# Altium schematic symbol library Ic%.SchLib: 452 symbols (part 4 of 12)
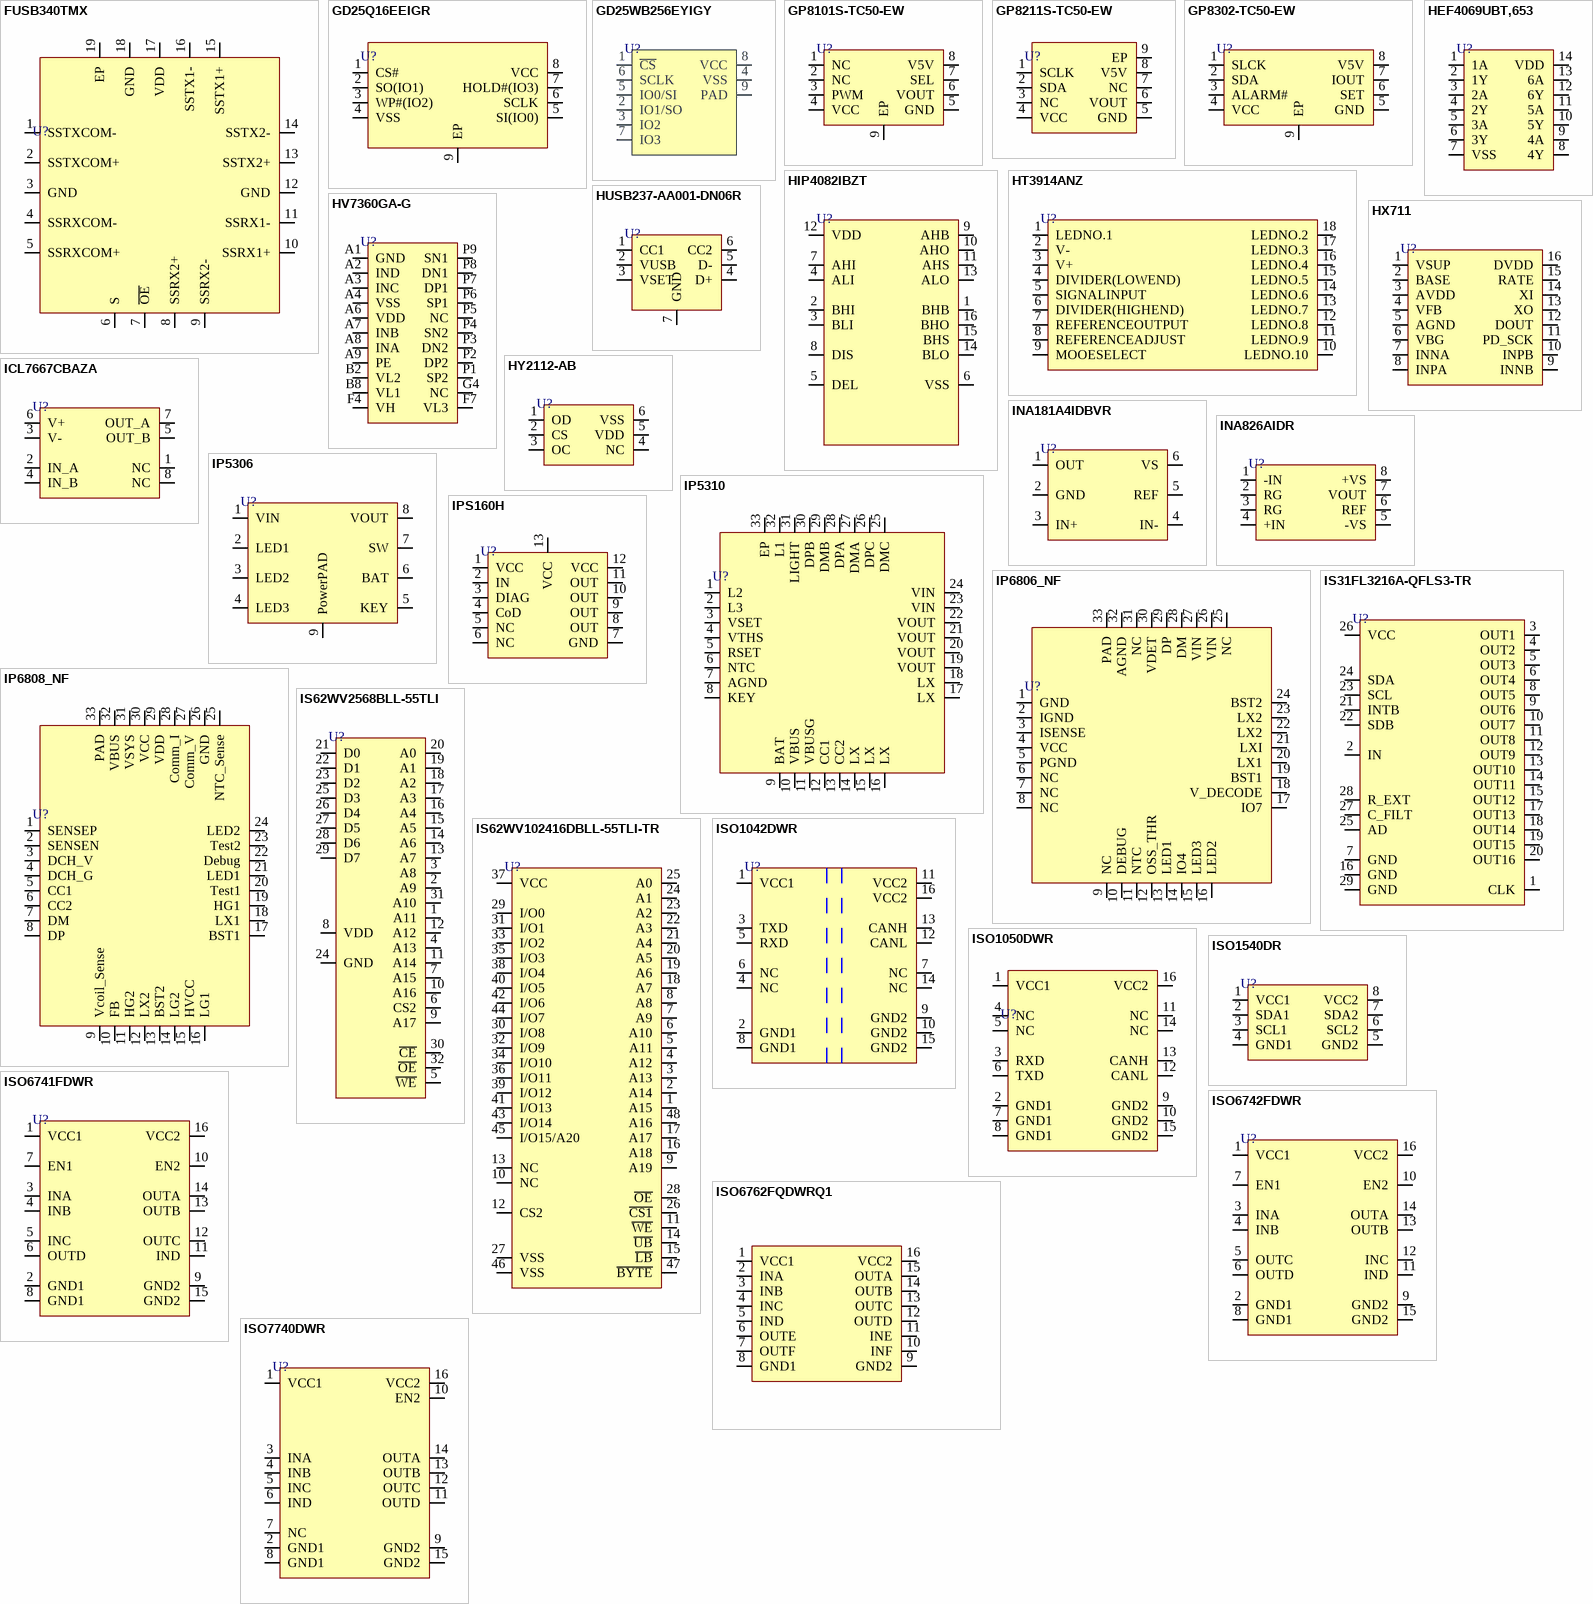
[diagram p26: symbols FUSB340TMX to ISO7740DWR]

## HUSB237-AA001-DN06R
designator U?
DFN-6L-EP(2x2) USB PD ROHS; Manufacturer: Hynetek; Manufacturer Part Number: HUSB237-AA001-DN06R; Item Type: IC; Package: DFN-6L-EP(2x2); LCSC Part Number: C22373734; ComponentLink1Description: LCSC; ComponentLink1URL: https://www.lcsc.com/product-detail/USB-PD_Hynetek-HUSB237-AA001-DN06R_C22373734.html
footprint DFN-6L-EP(2x2)
pins: 1 CC1, 2 VUSB, 3 VSET, 4 D+, 5 D-, 6 CC2, 7 GND

## HV7360GA-G
designator U?
Power Management Specialised - PMIC 1-Ch +/-100V 2.5A 2/3-Lev AC Coupled Pulser; Manufacturer: Microchip; Manufacturer Part Number: HV7360GA-G; Item Type: IC; Operating Supply Current: 50uA; Supplier: Farnell; LCSC Part Number: C633419; RoHS: Yes; Stock: 164; Mounting Technology: Surface Mount; Case/Package: TFBGA; Min Operating Temperature: -20°C; Max Operating Temperature: 85°C; Packaging: Tray; Series: -; RoHS Compliant: Yes; ComponentLink1URL: http://www.microchip.com/mymicrochip/filehandler.aspx?ddocname=en571410&src-supplier=Digikey; ComponentLink1Description: http://www.microchip.com/mymicrochip/filehandler.aspx?ddocname=en571410&src-supplier=Digikey
footprint CABGA-22
pins: A1 GND, A2 IND, A3 INC, A4 VSS, A6 VDD, A7 INB, A8 INA, A9 PE, B2 VL2, B8 VL1, F4 VH, F7 VL3, G4 NC, P1 SP2, P2 DP2, P3 DN2, P4 SN2, P5 NC, P6 SP1, P7 DP1, P8 DN1, P9 SN1

## HX711
designator U?
2.7V~5.5V 24Bit SOP-16 Analog to Digital Converters (ADC) ROHS; Manufacturer: Avia Semicon (Xiamen); Manufacturer Part Number: HX711; Item Type: IC; Package: SOP-16; LCSC Part Number: C6705483; ComponentLink1Description: LCSC; ComponentLink1URL: https://www.lcsc.com/product-detail/Analog-to-Digital-Converters-ADC_Avia-Semicon-Xiamen-HX711_C6705483.html
footprint SOP-16
pins: 1 VSUP, 2 BASE, 3 AVDD, 4 VFB, 5 AGND, 6 VBG, 7 INNA, 8 INPA, 9 INNB, 10 INPB, 11 PD_SCK, 12 DOUT, 13 XO, 14 XI, 15 RATE, 16 DVDD

## HY2112-AB
designator U?
SOT-23-6 Battery Management ROHS; Manufacturer: HYCON Tech; Manufacturer Part Number: HY2112-AB; Item Type: IC; Package: SOT-23-6; LCSC Part Number: C168763; ComponentLink1Description: LCSC; ComponentLink1URL: https://www.lcsc.com/product-detail/Battery-Management_HYCON-Tech-HY2112-AB_C168763.html?s_z=n_HY2112
footprint SOT-23-6
pins: 1 OD, 2 CS, 3 OC, 4 NC, 5 VDD, 6 VSS

## ICL7667CBAZA
designator U?
MOSFET 4.5V~15V SOIC-8 Gate Drive ICs ROHS; Manufacturer: RENESAS; Manufacturer Part Number: ICL7667CBAZA; Item Type: IC; Package: SOIC-8; LCSC Part Number: C1549286; ComponentLink1Description: LCSC; ComponentLink1URL: https://www.lcsc.com/product-detail/Gate-Drive-ICs_RENESAS-ICL7667CBAZA_C1549286.html
footprint SOIC-8(0.150", 3.80mm Width)
pins: 1 NC, 2 IN_A, 3 V-, 4 IN_B, 5 OUT_B, 6 V+, 7 OUT_A, 8 NC

## INA181A4IDBVR
designator U?
IC CURR SENSE 1 CIRCUIT SOT23-6; Manufacturer: Texas Instruments; Manufacturer Part Number: INA181A4IDBVR; Supplier: Mouser; Supplier Part Number: 595-INA181A4IDBVR; RoHS: Yes; Category: Amplifiers - Op Amps, Buffer, Instrumentation; Stock: 25817; Pricing: 1=0.49, 10=0.38, 50=0.38, 100=0.279, 1000=0.164, 10000=0.14 (USD); ComponentLink1URL: http://www.ti.com/lit/ds/symlink/ina181.pdf?src-supplier=Digikey; ComponentLink1Description: http://www.ti.com/lit/ds/symlink/ina181.pdf?src-supplier=Digikey; ComponentLink2URL: http://www.ti.com/general/docs/suppproductinfo.tsp?distId=10&amp;gotoUrl=http%3A%2F%2Fwww.ti.com%2Flit%2Fgpn%2Fina181&src-supplier=Digikey; ComponentLink2Description: http://www.ti.com/general/docs/suppproductinfo.tsp?distId=10&amp;gotoUrl=http%3A%2F%2Fwww.ti.com%2Flit%2Fgpn%2Fina181&src-supplier=Digikey
footprint SOT-23-6
pins: 1 OUT, 2 GND, 3 IN+, 4 IN-, 5 REF, 6 VS

## INA826AIDR
designator U?
IC INST AMP 1 CIRCUIT 8SOIC; Manufacturer: Texas Instruments; Manufacturer Part Number: INA826AIDR; Value: 100kR; Supplier: Mouser; Supplier Part Number: 595-INA826AIDR; RoHS: Yes; Item Type: IC; Stock: 20636; Pricing: 1=2.83, 10=2.41, 50=2.41, 100=2.09, 1000=1.53, 10000=1.4 (USD); Length: 4.9mm; Width: 3.91mm; Height: 1.75mm; Thickness: 1.58mm; ComponentLink1URL: https://datasheet.ciiva.com/4754/sbos562c-126294-4754611.pdf?src-supplier=Mouser; ComponentLink1Description: https://datasheet.ciiva.com/4754/sbos562c-126294-4754611.pdf?src-supplier=Mouser; ComponentLink2URL: https://datasheet.ciiva.com/14338/ina826-14338025.pdf?src-supplier=Avnet; ComponentLink2Description: https://datasheet.ciiva.com/14338/ina826-14338025.pdf?src-supplier=Avnet; ComponentLink3URL: https://datasheet.ciiva.com/1798/ina826-1798297.pdf?src-supplier=Digikey; ComponentLink3Description: https://datasheet.ciiva.com/1798/ina826-1798297.pdf?src-supplier=Digikey; ComponentLink4URL: https://datasheet.ciiva.com/1798/ina826-1798298.pdf?src-supplier=Digikey; ComponentLink4Description: https://datasheet.ciiva.com/1798/ina826-1798298.pdf?src-supplier=Digikey; ComponentLink5URL: https://datasheet.ciiva.com/1798/ina826-1798299.pdf?src-supplier=Digikey; ComponentLink5Description: https://datasheet.ciiva.com/1798/ina826-1798299.pdf?src-supplier=Digikey; LCSC Part Number: C38433
footprint SOIC-8(0.154", 3.90mm Width)
pins: 1 -IN, 2 RG, 3 RG, 4 +IN, 5 -VS, 6 REF, 7 VOUT, 8 +VS

## IP5306
designator U?
SOP-8-EP Battery Management ICs ROHS; Manufacturer: INJOINIC; Manufacturer Part Number: IP5306; Item Type: IC; Package: ESOP-8; ComponentLink1Description: JLCPCB; ComponentLink1URL: https://jlcpcb.com/partdetail/Injoinic-IP5306/C181692
footprint ESOP-8
pins: 1 VIN, 2 LED1, 3 LED2, 4 LED3, 5 KEY, 6 BAT, 7 SW, 8 VOUT, 9 PowerPAD

## IP5310
designator U?
4.65V~5.5V Lithium-ion/Polymer 1 QFN-32-EP(5x5) Battery Management ROHS; Manufacturer: INJOINIC; Manufacturer Part Number: IP5310; Item Type: IC; Package: QFN-32-EP(5x5); LCSC Part Number: C191176; ComponentLink1Description: LCSC; ComponentLink1URL: https://www.lcsc.com/product-detail/Battery-Management_INJOINIC-IP5310_C191176.html?s_z=n_IP5310
footprint QFN-32-EP(5x5)
pins: 1 L2, 2 L3, 3 VSET, 4 VTHS, 5 RSET, 6 NTC, 7 AGND, 8 KEY, 9 BAT, 10 VBUS, 11 VBUSG, 12 CC1, 13 CC2, 14 LX, 15 LX, 16 LX, 17 LX, 18 LX, 19 VOUT, 20 VOUT, 21 VOUT, 22 VOUT, 23 VIN, 24 VIN, 25 DMC, 26 DPC, 27 DMA, 28 DPA, 29 DMB, 30 DPB, 31 LIGHT, 32 L1, 33 EP

## IP6806_NF
designator U?
4.5V~12V QFN-32-EP(5x5) Battery Management ROHS; Manufacturer: INJOINIC; Manufacturer Part Number: IP6806_NF; Item Type: IC; Package: QFN-32-EP(5x5); LCSC Part Number: C515681; ComponentLink1Description: LCSC; ComponentLink1URL: https://lcsc.com/product-detail/Battery-Management_INJOINIC-IP6806_NF_C515681.html?s_z=n_IP6806
footprint QFN-32-EP(5x5)
pins: 1 GND, 2 IGND, 3 ISENSE, 4 VCC, 5 PGND, 6 NC, 7 NC, 8 NC, 9 NC, 10 DEBUG, 11 NTC, 12 OSS_THR, 13 LED1, 14 IO4, 15 LED3, 16 LED2, 17 IO7, 18 V_DECODE, 19 BST1, 20 LX1, 21 LXI, 22 LX2, 23 LX2, 24 BST2, 25 NC, 26 VIN, 27 VIN, 28 DM, 29 DP, 30 VDET, 31 NC, 32 AGND, 33 PAD

## IP6808_NF
designator U?
4.5V~22V QFN-32-EP(5x5) Battery Management ROHS; Manufacturer: INJOINIC; Manufacturer Part Number: IP6808_NF; Item Type: IC; Package: QFN-32-EP(5x5); LCSC Part Number: C515682; ComponentLink1Description: LCSC; ComponentLink1URL: https://lcsc.com/product-detail/Battery-Management_INJOINIC-IP6808_NF_C515682.html?s_z=n_IP6808
footprint QFN-32-EP(5x5)
pins: 1 SENSEP, 2 SENSEN, 3 DCH_V, 4 DCH_G, 5 CC1, 6 CC2, 7 DM, 8 DP, 9 Vcoil_Sense, 10 FB, 11 HG2, 12 LX2, 13 BST2, 14 LG2, 15 HVCC, 16 LG1, 17 BST1, 18 LX1, 19 HG1, 20 Test1, 21 LED1, 22 Debug, 23 Test2, 24 LED2, 25 NTC_Sense, 26 GND, 27 Comm_V, 28 Comm_I, 29 VDD, 30 VCC, 31 VSYS, 32 VBUS, 33 PAD

## IPS160H
designator U?
IC PWR SWTCH P-CHAN 1:1 PWRSSO12; Manufacturer: STMicroelectronics; Manufacturer Part Number: IPS160H; Max Breakdown Voltage: 65V; Max Input Current: 10mA; Max Supply Voltage: 60V; Min Supply Voltage: 8V; Output Current: 2.6A; Rds On Max: 60mR; Number of Channels: 1NUMBER; Supplier: Digikey; LCSC Part Number: C2971390; RoHS: Yes; Item Type: IC; Stock: 3572; Pricing: 1=3.42, 10=2.57, 25=2.358, 100=2.1247, 300=1.99453, 500=1.9464, 1000=1.89122, 2500=1.83297, 5000=1.79788 (USD); Nominal Supply Voltage: 60V; Output Voltage: 65V; ComponentLink1URL: http://www.farnell.com/datasheets/2815812.pdf?src-supplier=Farnell; ComponentLink1Description: http://www.farnell.com/datasheets/2815812.pdf?src-supplier=Farnell; ComponentLink2URL: http://www.farnell.com/datasheets/2815812.pdf?src-supplier=Newark; ComponentLink2Description: http://www.farnell.com/datasheets/2815812.pdf?src-supplier=Newark; ComponentLink3URL: http://www.st.com/content/ccc/resource/technical/document/datasheet/ae/09/44/50/bc/5b/4d/e9/DM00164821.pdf/files/DM00164821.pdf/jcr:content/translations/en.DM00164821.pdf?src-supplier=Digikey; ComponentLink3Description: http://www.st.com/content/ccc/resource/technical/document/datasheet/ae/09/44/50/bc/5b/4d/e9/DM00164821.pdf/files/DM00164821.pdf/jcr:content/translations/en.DM00164821.pdf?src-supplier=Digikey; ComponentLink4URL: https://datasheet.octopart.com/IPS160H-STMicroelectronics-datasheet-101746762.pdf?src-supplier=SHENGYU+ELECTRONICS; ComponentLink4Description: https://datasheet.octopart.com/IPS160H-STMicroelectronics-datasheet-101746762.pdf?src-supplier=SHENGYU+ELECTRONICS
footprint PowerSSO-12
pins: 1 VCC, 2 IN, 3 DIAG, 4 CoD, 5 NC, 6 NC, 7 GND, 8 OUT, 9 OUT, 10 OUT, 11 OUT, 12 VCC, 13 VCC

## IS31FL3216A-QFLS3-TR
designator U?
IC LED DRVR LIN PWM 20MA 28QFN; Manufacturer: ISSI; Manufacturer Part Number: IS31FL3216A-QFLS3-TR; Number of Outputs: 16; Max Supply Voltage: 5.5V; Supplier: Digi-Key; Supplier Part Number: 2521-IS31FL3216A-QFLS3-TRCT-ND; RoHS: Yes; Category: LED Drivers; Stock: 11431; Pricing: 1=1.5, 10=1.341, 25=1.2728, 100=1.0454, 250=0.97716, 500=0.86356, 1000=0.68175 (USD); Mounting Technology: Surface Mount; Case/Package: QFN; Min Operating Temperature: -40°C; Max Operating Temperature: 105°C; Dimming: PWM; Packaging: Cut Tape; Output Current per Channel: 20mA; Series: -; RoHS Compliant: Yes; ComponentLink1URL: http://www.issi.com/WW/pdf/IS31FL3216A.pdf?src-supplier=Digi-Key; ComponentLink1Description: http://www.issi.com/WW/pdf/IS31FL3216A.pdf?src-supplier=Digi-Key; LCSC Part Number: C2678726; Item Type: IC
footprint QFN-28-EP(4x4)
pins: 1 CLK, 2 IN, 3 OUT1, 4 OUT2, 5 OUT3, 6 OUT4, 7 GND , 8 OUT5, 9 OUT6, 10 OUT7, 11 OUT8, 12 OUT9, 13 OUT10, 14 OUT11, 15 OUT12, 16 GND , 17 OUT13, 18 OUT14, 19 OUT15, 20 OUT16, 21 INTB, 22 SDB, 23 SCL, 24 SDA, 25 AD, 26 VCC, 27 C_FILT, 28 R_EXT, 29 GND

## IS62WV2568BLL-55TLI
designator U?
IC SRAM 2MBIT PARALLEL 32TSOP I; Manufacturer: ISSI; Manufacturer Part Number: IS62WV2568BLL-55TLI; Supplier: Mouser; Supplier Part Number: 87062WV2568BLL55TLI; RoHS: Yes; Item Type: IC; Stock: 2331; Pricing: 1=2.58, 10=2.29, 50=2.29, 100=2.04, 1000=1.96, 10000=1.65 (USD); ComponentLink1URL: https://datasheet.ciiva.com/15124/getdatasheetpartid-104771-15124254.pdf?src-supplier=Verical; ComponentLink1Description: https://datasheet.ciiva.com/15124/getdatasheetpartid-104771-15124254.pdf?src-supplier=Verical; ComponentLink2URL: https://datasheet.ciiva.com/1904/is62wv2568a-bll-1904596.pdf?src-supplier=Digikey; ComponentLink2Description: https://datasheet.ciiva.com/1904/is62wv2568a-bll-1904596.pdf?src-supplier=Digikey
footprint TSOPI-32
pins: 1 A11, 2 A9, 3 A8, 4 A13, 5 ~{WE}, 6 CS2, 7 A15, 8 VDD, 9 A17, 10 A16, 11 A14, 12 A12, 13 A7, 14 A6, 15 A5, 16 A4, 17 A3, 18 A2, 19 A1, 20 A0, 21 D0, 22 D1, 23 D2, 24 GND, 25 D3, 26 D4, 27 D5, 28 D6, 29 D7, 30 ~{CE}, 31 A10, 32 ~{OE}

## IS62WV102416DBLL-55TLI-TR
designator U?
IC SRAM 16MBIT PARALLEL 48TSOP I; Manufacturer: ISSI; Manufacturer Part Number: IS62WV102416DBLL-55TLI-TR; Memory Format: Volatile,SRAM; Memory Size: 16Mb; Access Time: 55ns; Supplier: Digikey; Supplier Part Number: 706-IS62WV102416DBLL-55TLI-TRCT-ND; RoHS: Yes; Item Type: IC; Stock: 1390; Pricing: 1=11.11, 10=9.865, 25=9.408, 50=9.0762, 100=8.7557, 250=8.34852, 500=8.05256 (USD); Mounting Technology: Surface Mount; Case/Package: TFSOP; Min Operating Temperature: -40°C; Max Operating Temperature: 85°C; Packaging: Tape and Reel; Series: -; RoHS Compliant: Yes; ComponentLink1URL: http://www.mouser.com/ds/2/198/62-65WV102416DALL-DBLL-319010.pdf?src-supplier=Mouser; ComponentLink1Description: http://www.mouser.com/ds/2/198/62-65WV102416DALL-DBLL-319010.pdf?src-supplier=Mouser; ComponentLink2URL: http://www.issi.com/WW/pdf/62-65WV102416DALL-DBLL.pdf?src-supplier=Avnet; ComponentLink2Description: http://www.issi.com/WW/pdf/62-65WV102416DALL-DBLL.pdf?src-supplier=Avnet; ComponentLink3URL: http://www.issi.com/WW/pdf/62-65WV102416DALL-DBLL.pdf?src-supplier=Digikey; ComponentLink3Description: http://www.issi.com/WW/pdf/62-65WV102416DALL-DBLL.pdf?src-supplier=Digikey
footprint 48-TSOP I
pins: 1 A15, 2 A14, 3 A13, 4 A12, 5 A11, 6 A10, 7 A9, 8 A8, 9 A19, 10 NC, 11 ~{WE}, 12 CS2, 13 NC, 14 ~{UB}, 15 ~{LB}, 16 A18, 17 A17, 18 A7, 19 A6, 20 A5, 21 A4, 22 A3, 23 A2, 24 A1, 25 A0, 26 ~{CS1}, 27 VSS, 28 ~{OE}, 29 I/O0, 30 I/O8, 31 I/O1, 32 I/O9, 33 I/O2, 34 I/O10, 35 I/O3, 36 I/O11, 37 VCC, 38 I/O4, 39 I/O12, 40 I/O5, 41 I/O13, 42 I/O6, 43 I/O14, 44 I/O7, 45 I/O15/A20, 46 VSS, 47 ~{BYTE}, 48 A16

## ISO1042DWR
designator U?
IC TRANSCEIVER FULL 1/1 16SOIC; Manufacturer: Texas Instruments; Manufacturer Part Number: ISO1042DWR; Supplier: Mouser; LCSC Part Number: C1848126; RoHS: Yes; Item Type: IC; Stock: 2008; Pricing: 1=3.75, 10=2.83, 50=2.6, 100=2.35, 1000=2.09, 10000=1.92 (USD); ComponentLink1URL: http://www.ti.com/lit/gpn/iso1042?src-supplier=Digikey; ComponentLink1Description: http://www.ti.com/lit/gpn/iso1042?src-supplier=Digikey
footprint SOIC-16-300mil
pins: 1 VCC1, 2 GND1, 3 TXD, 4 NC, 5 RXD, 6 NC, 7 NC, 8 GND1, 9 GND2, 10 GND2, 11 VCC2, 12 CANL, 13 CANH, 14 NC, 15 GND2, 16 VCC2

## ISO1050DWR
designator U?
1/1 Transceiver Half CAN 16-SOIC; Manufacturer: Texas Instruments; Manufacturer Part Number: ISO1050DWR; Data Rate: 1Mbps; Max Supply Voltage: 5.5V; Min Supply Voltage: 3V; Propagation Delay: 74ns; Number of Channels: 2; Number of Transceivers: 1; Simplex/Duplex: Half Duplex; Receiver Hysteresis: 150mV; Working Voltage: 1.2V; Supply Current: 2mA; Item Type: IC; Supplier: Mouser; Supplier Part Number: 595-ISO1050DWR; RoHS: Yes; Category: Interface ICs; Stock: 4624; Pricing: 1=4.3, 10=3.76, 50=3.76, 100=3.17, 1000=2.37, 10000=2.26 (USD); Case/Package: SOIC; Pins: 16; Min Operating Temperature: -55°C; Max Operating Temperature: 105°C; Packaging: Tape and Reel; Package Quantity: 2000; Number of Drivers: 1; Series: -; Radiation Hardening: No; Lead Free: Lead Free; RoHS Compliant: Yes; ComponentLink1URL: https://datasheet.ciiva.com/4782/slls983e-121851-4782209.pdf?src-supplier=Mouser; ComponentLink1Description: https://datasheet.ciiva.com/4782/slls983e-121851-4782209.pdf?src-supplier=Mouser; ComponentLink2URL: https://datasheet.ciiva.com/26913/getdatasheetpartid-573378-26913111.pdf?src-supplier=Verical; ComponentLink2Description: https://datasheet.ciiva.com/26913/getdatasheetpartid-573378-26913111.pdf?src-supplier=Verical; LCSC Part Number: C93718
footprint SOIC-16-300mil
pins: 1 VCC1, 2 GND1, 3 RXD, 4 NC, 5 NC, 6 TXD, 7 GND1, 8 GND1, 9 GND2, 10 GND2, 11 NC, 12 CANL, 13 CANH, 14 NC, 15 GND2, 16 VCC2

## ISO1540DR
designator U?
DGTL ISOLTR 2.5KV 2CH I2C 8-SOIC; Manufacturer: Texas Instruments; Manufacturer Part Number: ISO1540DR; Item Type: IC; Number of Channels: 2; Data Rate: 1Mbps; Min Supply Voltage: 3V; Max Supply Voltage: 5.5V; Channel Type: Bidirectional; Propagation Delay: 70ns; Isolated Power: No; Pulse Width Distortion (PWD): 21ns; Working Voltage: 566V; Supply Current: 3.6mA; Interface: 39,4268Interface; Supplier: Mouser; LCSC Part Number: C179739; RoHS: Yes; Stock: 9421; Pricing: 1=4.01, 10=2.79, 50=2.79, 100=2.52, 1000=2.25, 10000=2.16 (USD); Case/Package: SOIC; Pins: 8; Min Operating Temperature: -40°C; Max Operating Temperature: 125°C; Packaging: Tape and Reel; Package Quantity: 1; Series: -; Length: 4.9mm; Width: 3.91mm; Height: 1.75mm; Thickness: 1.58mm; Reach SVHC Compliant: No; Lead Free: Lead Free; RoHS Compliant: Yes; ComponentLink1URL: https://datasheet.ciiva.com/6579/iso1540-6579724.pdf?src-supplier=Digikey; ComponentLink1Description: https://datasheet.ciiva.com/6579/iso1540-6579724.pdf?src-supplier=Digikey; ComponentLink2URL: https://datasheet.ciiva.com/6579/iso1540-6579723.pdf?src-supplier=Digikey; ComponentLink2Description: https://datasheet.ciiva.com/6579/iso1540-6579723.pdf?src-supplier=Digikey; ComponentLink3URL: https://datasheet.ciiva.com/6579/iso1540-6579725.pdf?src-supplier=Digikey; ComponentLink3Description: https://datasheet.ciiva.com/6579/iso1540-6579725.pdf?src-supplier=Digikey; ComponentLink4URL: https://datasheet.ciiva.com/14196/iso1540-14196749.pdf?src-supplier=Avnet; ComponentLink4Description: https://datasheet.ciiva.com/14196/iso1540-14196749.pdf?src-supplier=Avnet
footprint SOIC-8(0.154", 3.90mm Width)
pins: 1 VCC1, 2 SDA1, 3 SCL1, 4 GND1, 5 GND2, 6 SCL2, 7 SDA2, 8 VCC2

## ISO6741FDWR
designator U?
DG ISO 5KV 4CH CAN/RS232 16-SOIC; Manufacturer: Texas Instruments; Manufacturer Part Number: ISO6742FDWR; Item Type: IC; Supplier: Digikey; LCSC Part Number: C5216408; RoHS: No; Stock: 6799; Pricing: 1=2.23, 10=1.651, 25=1.506, 100=1.3468, 250=1.27092, 500=1.2252, 1000=1.18756 (USD)
footprint SOIC-16-300mil
pins: 1 VCC1, 2 GND1, 3 INA, 4 INB, 5 INC, 6 OUTD, 7 EN1, 8 GND1, 9 GND2, 10 EN2, 11 IND, 12 OUTC, 13 OUTB, 14 OUTA, 15 GND2, 16 VCC2

## ISO6742FDWR
designator U?
DG ISO 5KV 4CH CAN/RS232 16-SOIC; Manufacturer: Texas Instruments; Manufacturer Part Number: ISO6742FDWR; Item Type: IC; Supplier: Digikey; LCSC Part Number: C5216408; RoHS: No; Stock: 6799; Pricing: 1=2.23, 10=1.651, 25=1.506, 100=1.3468, 250=1.27092, 500=1.2252, 1000=1.18756 (USD)
footprint SOIC-16-300mil
pins: 1 VCC1, 2 GND1, 3 INA, 4 INB, 5 OUTC, 6 OUTD, 7 EN1, 8 GND1, 9 GND2, 10 EN2, 11 IND, 12 INC, 13 OUTB, 14 OUTA, 15 GND2, 16 VCC2

## ISO6762FQDWRQ1
designator U?
AUTOMOTIVE, GENERAL-PURPOSE, 50-; Item Type: IC; LCSC Part Number: C5216383; ComponentLink1Description: LCSC; Supplier: Mouser; Supplier Part Number: 595-ISO6762FQDWRQ1; RoHS: No; Category: Integrated Circuits (ICs); Stock: 8302; Pricing: 1=3.36, 10=2.94, 50=2.94, 100=2.48, 1000=1.78, 10000=1.77 (USD)
footprint 16-SOIC (0.295", 7.50mm Width)
pins: 1 VCC1, 2 INA, 3 INB, 4 INC, 5 IND, 6 OUTE, 7 OUTF, 8 GND1, 9 GND2, 10 INF, 11 INE, 12 OUTD, 13 OUTC, 14 OUTB, 15 OUTA, 16 VCC2

## ISO7740DWR
designator U?
DGTL ISO 5000VRMS 4CH GP 16SOIC; Manufacturer: Texas Instruments; Manufacturer Part Number: ISO7740DWR; Item Type: IC; Supplier: Mouser; LCSC Part Number: C529547; RoHS: Yes; Stock: 19329; Pricing: 1=2.71, 10=1.85, 50=1.85, 100=1.61, 1000=1.59, 10000=1.59 (USD); Length: 10.3mm; Width: 7.5mm; Height: 2.65mm; Thickness: 2.35mm; Lead Free: 5697LeadFree; ComponentLink1URL: http://www.ti.com/general/docs/lit/getliterature.tsp?genericPartNumber=ISO7740&fileType=pdf&src-supplier=Farnell; ComponentLink1Description: http://www.ti.com/general/docs/lit/getliterature.tsp?genericPartNumber=ISO7740&fileType=pdf&src-supplier=Farnell; ComponentLink2URL: http://www.ti.com/lit/ds/symlink/iso7741.pdf?src-supplier=Digikey; ComponentLink2Description: http://www.ti.com/lit/ds/symlink/iso7741.pdf?src-supplier=Digikey; ComponentLink3URL: http://www.farnell.com/datasheets/2113498.pdf?src-supplier=Element14; ComponentLink3Description: http://www.farnell.com/datasheets/2113498.pdf?src-supplier=Element14; ComponentLink4URL: http://www.ti.com/general/docs/suppproductinfo.tsp?distId=10&amp;gotoUrl=http%3A%2F%2Fwww.ti.com%2Flit%2Fgpn%2Fiso7741&src-supplier=Digikey; ComponentLink4Description: http://www.ti.com/general/docs/suppproductinfo.tsp?distId=10&amp;gotoUrl=http%3A%2F%2Fwww.ti.com%2Flit%2Fgpn%2Fiso7741&src-supplier=Digikey
footprint SOIC-16-300mil
pins: 1 VCC1, 2 GND1, 3 INA, 4 INB, 5 INC, 6 IND, 7 NC, 8 GND1, 9 GND2, 10 EN2, 11 OUTD, 12 OUTC, 13 OUTB, 14 OUTA, 15 GND2, 16 VCC2

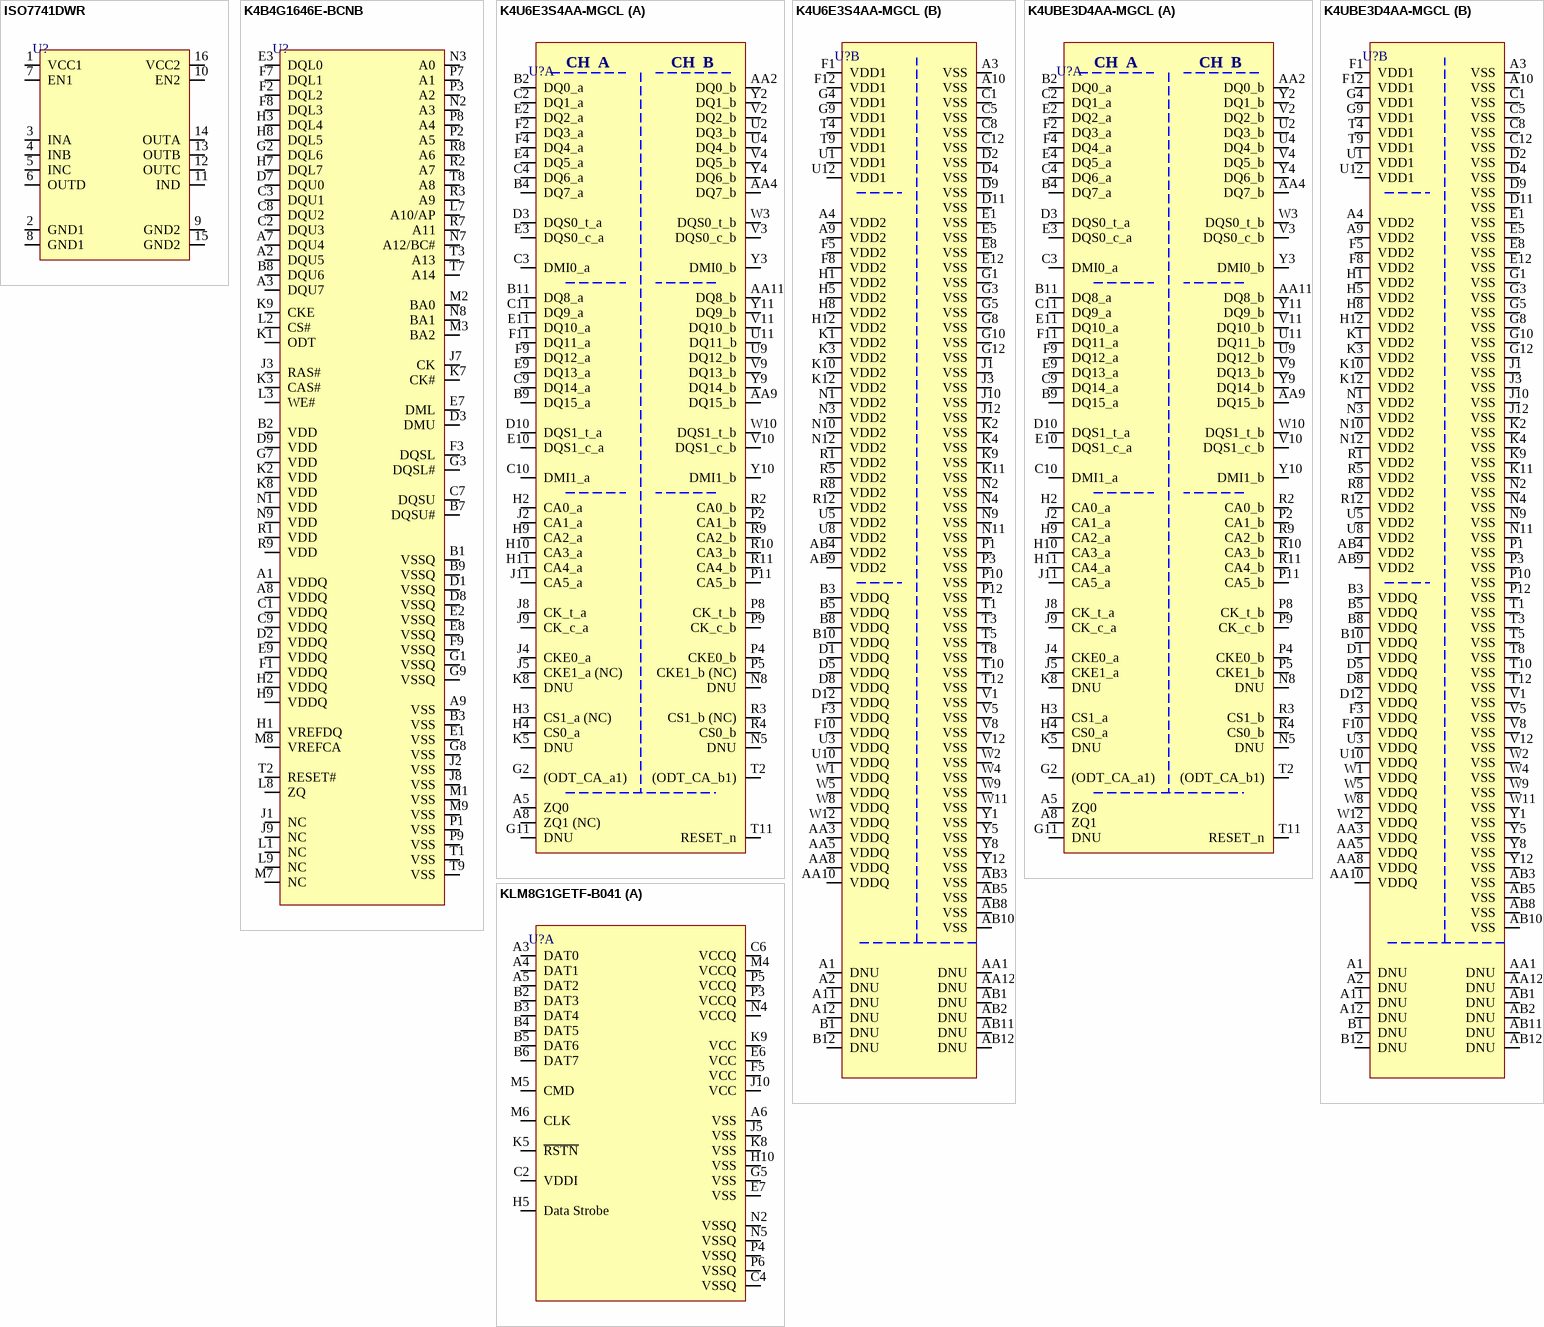
[diagram p6: symbols ISO7741DWR to KLM8G1GETF-B041]

## ISO7741DWR
designator U?
DGTL ISO 5000VRMS 4CH GP 16SOIC; Manufacturer: Texas Instruments; Manufacturer Part Number: ISO7741DWR; Item Type: IC; Number of Channels: 4; Isolated Power: No; Channel Type: Unidirectional; Data Rate: 100Mbps; Propagation Delay: 16ns; Pulse Width Distortion (PWD): 4.9ns; Supplier: Mouser; LCSC Part Number: C571196; RoHS: Yes; Stock: 8750; Pricing: 1=2.32, 10=1.36, 50=1.36, 100=1.29, 1000=1.22, 10000=1.1 (USD); Mounting Technology: Surface Mount; Case/Package: SOIC; Pins: 16; Min Operating Temperature: -55°C; Max Operating Temperature: 125°C; Type: General Purpose; Series: -; Packaging: Cut Tape; Lead Free: Lead Free; RoHS Compliant: Yes; ComponentLink1URL: http://www.ti.com/lit/ds/symlink/iso7741.pdf?src-supplier=Digikey; ComponentLink1Description: http://www.ti.com/lit/ds/symlink/iso7741.pdf?src-supplier=Digikey; ComponentLink2URL: http://www.ti.com/general/docs/suppproductinfo.tsp?distId=10&amp;gotoUrl=http%3A%2F%2Fwww.ti.com%2Flit%2Fgpn%2Fiso7741&src-supplier=Digikey; ComponentLink2Description: http://www.ti.com/general/docs/suppproductinfo.tsp?distId=10&amp;gotoUrl=http%3A%2F%2Fwww.ti.com%2Flit%2Fgpn%2Fiso7741&src-supplier=Digikey
footprint SOIC-16-300mil
pins: 1 VCC1, 2 GND1, 3 INA, 4 INB, 5 INC, 6 OUTD, 7 EN1, 8 GND1, 9 GND2, 10 EN2, 11 IND, 12 OUTC, 13 OUTB, 14 OUTA, 15 GND2, 16 VCC2

## K4B4G1646E-BCNB
designator U?
FBGA-96 DDR SDRAM ROHS; Manufacturer: Samsung; Manufacturer Part Number: K4B4G1646E-BCNB; Item Type: IC; Package: FBGA-96; LCSC Part Number: C2803248; ComponentLink1Description: LCSC; ComponentLink1URL: https://www.lcsc.com/product-detail/DDR-SDRAM_Samsung-K4B4G1646E-BCNB_C2803248.html
footprint 96-FBGA (8x14)
pins: A1 VDDQ, A2 DQU5, A3 DQU7, A7 DQU4, A8 VDDQ, A9 VSS, B1 VSSQ, B2 VDD, B3 VSS, B7 DQSU#, B8 DQU6, B9 VSSQ, C1 VDDQ, C2 DQU3, C3 DQU1, C7 DQSU, C8 DQU2, C9 VDDQ, D1 VSSQ, D2 VDDQ, D3 DMU, D7 DQU0, D8 VSSQ, D9 VDD, E1 VSS, E2 VSSQ, E3 DQL0, E7 DML, E8 VSSQ, E9 VDDQ, F1 VDDQ, F2 DQL2, F3 DQSL, F7 DQL1, F8 DQL3, F9 VSSQ, G1 VSSQ, G2 DQL6, G3 DQSL#, G7 VDD, G8 VSS, G9 VSSQ, H1 VREFDQ, H2 VDDQ, H3 DQL4, H7 DQL7, H8 DQL5, H9 VDDQ, J1 NC, J2 VSS, J3 RAS#, J7 CK, J8 VSS, J9 NC, K1 ODT, K2 VDD, K3 CAS#, K7 CK#, K8 VDD, K9 CKE, L1 NC, L2 CS#, L3 WE#, L7 A10/AP, L8 ZQ, L9 NC, M1 VSS, M2 BA0, M3 BA2, M7 NC, M8 VREFCA, M9 VSS, N1 VDD, N2 A3, N3 A0, N7 A12/BC#, N8 BA1, N9 VDD, P1 VSS, P2 A5, P3 A2, P7 A1, P8 A4, P9 VSS, R1 VDD, R2 A7, R3 A9, R7 A11, R8 A6, R9 VDD, T1 VSS, T2 RESET#, T3 A13, T7 A14, T8 A8, T9 VSS

## K4U6E3S4AA-MGCL
designator U?
FBGA-200 DDR SDRAM ROHS; Manufacturer: Samsung; Manufacturer Part Number: K4U6E3S4AA-MGCL; Item Type: IC; Supplier: LCSC; LCSC Part Number: C2920249; RoHS: No; Stock: 962; Pricing: 1=9.1076, 10=7.9029, 30=7.1674, 128=6.5516 (USD)
footprint 200-WFBGA (10x15)
part A pins: A5 ZQ0, A8 ZQ1 (NC), AA2 DQ0_b, AA4 DQ7_b, AA9 DQ15_b, AA11 DQ8_b, B2 DQ0_a, B4 DQ7_a, B9 DQ15_a, B11 DQ8_a, C2 DQ1_a, C3 DMI0_a, C4 DQ6_a, C9 DQ14_a, C10 DMI1_a, C11 DQ9_a, D3 DQS0_t_a, D10 DQS1_t_a, E2 DQ2_a, E3 DQS0_c_a, E4 DQ5_a, E9 DQ13_a, E10 DQS1_c_a, E11 DQ10_a, F2 DQ3_a, F4 DQ4_a, F9 DQ12_a, F11 DQ11_a, G2 (ODT_CA_a1), G11 DNU, H2 CA0_a, H3 CS1_a (NC), H4 CS0_a, H9 CA2_a, H10 CA3_a, H11 CA4_a, J2 CA1_a, J4 CKE0_a, J5 CKE1_a (NC), J8 CK_t_a, J9 CK_c_a, J11 CA5_a, K5 DNU, K8 DNU, N5 DNU, N8 DNU, P2 CA1_b, P4 CKE0_b, P5 CKE1_b (NC), P8 CK_t_b, P9 CK_c_b, P11 CA5_b, R2 CA0_b, R3 CS1_b (NC), R4 CS0_b, R9 CA2_b, R10 CA3_b, R11 CA4_b, T2 (ODT_CA_b1), T11 RESET_n, U2 DQ3_b, U4 DQ4_b, U9 DQ12_b, U11 DQ11_b, V2 DQ2_b, V3 DQS0_c_b, V4 DQ5_b, V9 DQ13_b, V10 DQS1_c_b, V11 DQ10_b, W3 DQS0_t_b, W10 DQS1_t_b, Y2 DQ1_b, Y3 DMI0_b, Y4 DQ6_b, Y9 DQ14_b, Y10 DMI1_b, Y11 DQ9_b
part B pins: A1 DNU, A2 DNU, A3 VSS, A4 VDD2, A9 VDD2, A10 VSS, A11 DNU, A12 DNU, AA1 DNU, AA3 VDDQ, AA5 VDDQ, AA8 VDDQ, AA10 VDDQ, AA12 DNU, AB1 DNU, AB2 DNU, AB3 VSS, AB4 VDD2, AB5 VSS, AB8 VSS, AB9 VDD2, AB10 VSS, AB11 DNU, AB12 DNU, B1 DNU, B3 VDDQ, B5 VDDQ, B8 VDDQ, B10 VDDQ, B12 DNU, C1 VSS, C5 VSS, C8 VSS, C12 VSS, D1 VDDQ, D2 VSS, D4 VSS, D5 VDDQ, D8 VDDQ, D9 VSS, D11 VSS, D12 VDDQ, E1 VSS, E5 VSS, E8 VSS, E12 VSS, F1 VDD1, F3 VDDQ, F5 VDD2, F8 VDD2, F10 VDDQ, F12 VDD1, G1 VSS, G3 VSS, G4 VDD1, G5 VSS, G8 VSS, G9 VDD1, G10 VSS, G12 VSS, H1 VDD2, H5 VDD2, H8 VDD2, H12 VDD2, J1 VSS, J3 VSS, J10 VSS, J12 VSS, K1 VDD2, K2 VSS, K3 VDD2, K4 VSS, K9 VSS, K10 VDD2, K11 VSS, K12 VDD2, N1 VDD2, N2 VSS, N3 VDD2, N4 VSS, N9 VSS, N10 VDD2, N11 VSS, N12 VDD2, P1 VSS, P3 VSS, P10 VSS, P12 VSS, R1 VDD2, R5 VDD2, R8 VDD2, R12 VDD2, T1 VSS, T3 VSS, T4 VDD1, T5 VSS, T8 VSS, T9 VDD1, T10 VSS, T12 VSS, U1 VDD1, U3 VDDQ, U5 VDD2, U8 VDD2, U10 VDDQ, U12 VDD1, V1 VSS, V5 VSS, V8 VSS, V12 VSS, W1 VDDQ, W2 VSS, W4 VSS, W5 VDDQ, W8 VDDQ, W9 VSS, W11 VSS, W12 VDDQ, Y1 VSS, Y5 VSS, Y8 VSS, Y12 VSS
part A text: CH  A; CH  B

## K4UBE3D4AA-MGCL
designator U?
FBGA-200 DDR SDRAM ROHS; Manufacturer: Samsung; Manufacturer Part Number: K4UBE3D4AA-MGCL; Item Type: IC; Package: FBGA-200; LCSC Part Number: C2920257; ComponentLink1Description: LCSC; ComponentLink1URL: https://www.lcsc.com/product-detail/DDR-SDRAM_Samsung-K4UBE3D4AA-MGCL_C2920257.html
footprint 200-WFBGA (10x14.5)
part A pins: A5 ZQ0, A8 ZQ1, AA2 DQ0_b, AA4 DQ7_b, AA9 DQ15_b, AA11 DQ8_b, B2 DQ0_a, B4 DQ7_a, B9 DQ15_a, B11 DQ8_a, C2 DQ1_a, C3 DMI0_a, C4 DQ6_a, C9 DQ14_a, C10 DMI1_a, C11 DQ9_a, D3 DQS0_t_a, D10 DQS1_t_a, E2 DQ2_a, E3 DQS0_c_a, E4 DQ5_a, E9 DQ13_a, E10 DQS1_c_a, E11 DQ10_a, F2 DQ3_a, F4 DQ4_a, F9 DQ12_a, F11 DQ11_a, G2 (ODT_CA_a1), G11 DNU, H2 CA0_a, H3 CS1_a, H4 CS0_a, H9 CA2_a, H10 CA3_a, H11 CA4_a, J2 CA1_a, J4 CKE0_a, J5 CKE1_a, J8 CK_t_a, J9 CK_c_a, J11 CA5_a, K5 DNU, K8 DNU, N5 DNU, N8 DNU, P2 CA1_b, P4 CKE0_b, P5 CKE1_b, P8 CK_t_b, P9 CK_c_b, P11 CA5_b, R2 CA0_b, R3 CS1_b, R4 CS0_b, R9 CA2_b, R10 CA3_b, R11 CA4_b, T2 (ODT_CA_b1), T11 RESET_n, U2 DQ3_b, U4 DQ4_b, U9 DQ12_b, U11 DQ11_b, V2 DQ2_b, V3 DQS0_c_b, V4 DQ5_b, V9 DQ13_b, V10 DQS1_c_b, V11 DQ10_b, W3 DQS0_t_b, W10 DQS1_t_b, Y2 DQ1_b, Y3 DMI0_b, Y4 DQ6_b, Y9 DQ14_b, Y10 DMI1_b, Y11 DQ9_b
part B pins: A1 DNU, A2 DNU, A3 VSS, A4 VDD2, A9 VDD2, A10 VSS, A11 DNU, A12 DNU, AA1 DNU, AA3 VDDQ, AA5 VDDQ, AA8 VDDQ, AA10 VDDQ, AA12 DNU, AB1 DNU, AB2 DNU, AB3 VSS, AB4 VDD2, AB5 VSS, AB8 VSS, AB9 VDD2, AB10 VSS, AB11 DNU, AB12 DNU, B1 DNU, B3 VDDQ, B5 VDDQ, B8 VDDQ, B10 VDDQ, B12 DNU, C1 VSS, C5 VSS, C8 VSS, C12 VSS, D1 VDDQ, D2 VSS, D4 VSS, D5 VDDQ, D8 VDDQ, D9 VSS, D11 VSS, D12 VDDQ, E1 VSS, E5 VSS, E8 VSS, E12 VSS, F1 VDD1, F3 VDDQ, F5 VDD2, F8 VDD2, F10 VDDQ, F12 VDD1, G1 VSS, G3 VSS, G4 VDD1, G5 VSS, G8 VSS, G9 VDD1, G10 VSS, G12 VSS, H1 VDD2, H5 VDD2, H8 VDD2, H12 VDD2, J1 VSS, J3 VSS, J10 VSS, J12 VSS, K1 VDD2, K2 VSS, K3 VDD2, K4 VSS, K9 VSS, K10 VDD2, K11 VSS, K12 VDD2, N1 VDD2, N2 VSS, N3 VDD2, N4 VSS, N9 VSS, N10 VDD2, N11 VSS, N12 VDD2, P1 VSS, P3 VSS, P10 VSS, P12 VSS, R1 VDD2, R5 VDD2, R8 VDD2, R12 VDD2, T1 VSS, T3 VSS, T4 VDD1, T5 VSS, T8 VSS, T9 VDD1, T10 VSS, T12 VSS, U1 VDD1, U3 VDDQ, U5 VDD2, U8 VDD2, U10 VDDQ, U12 VDD1, V1 VSS, V5 VSS, V8 VSS, V12 VSS, W1 VDDQ, W2 VSS, W4 VSS, W5 VDDQ, W8 VDDQ, W9 VSS, W11 VSS, W12 VDDQ, Y1 VSS, Y5 VSS, Y8 VSS, Y12 VSS
part A text: CH  A; CH  B

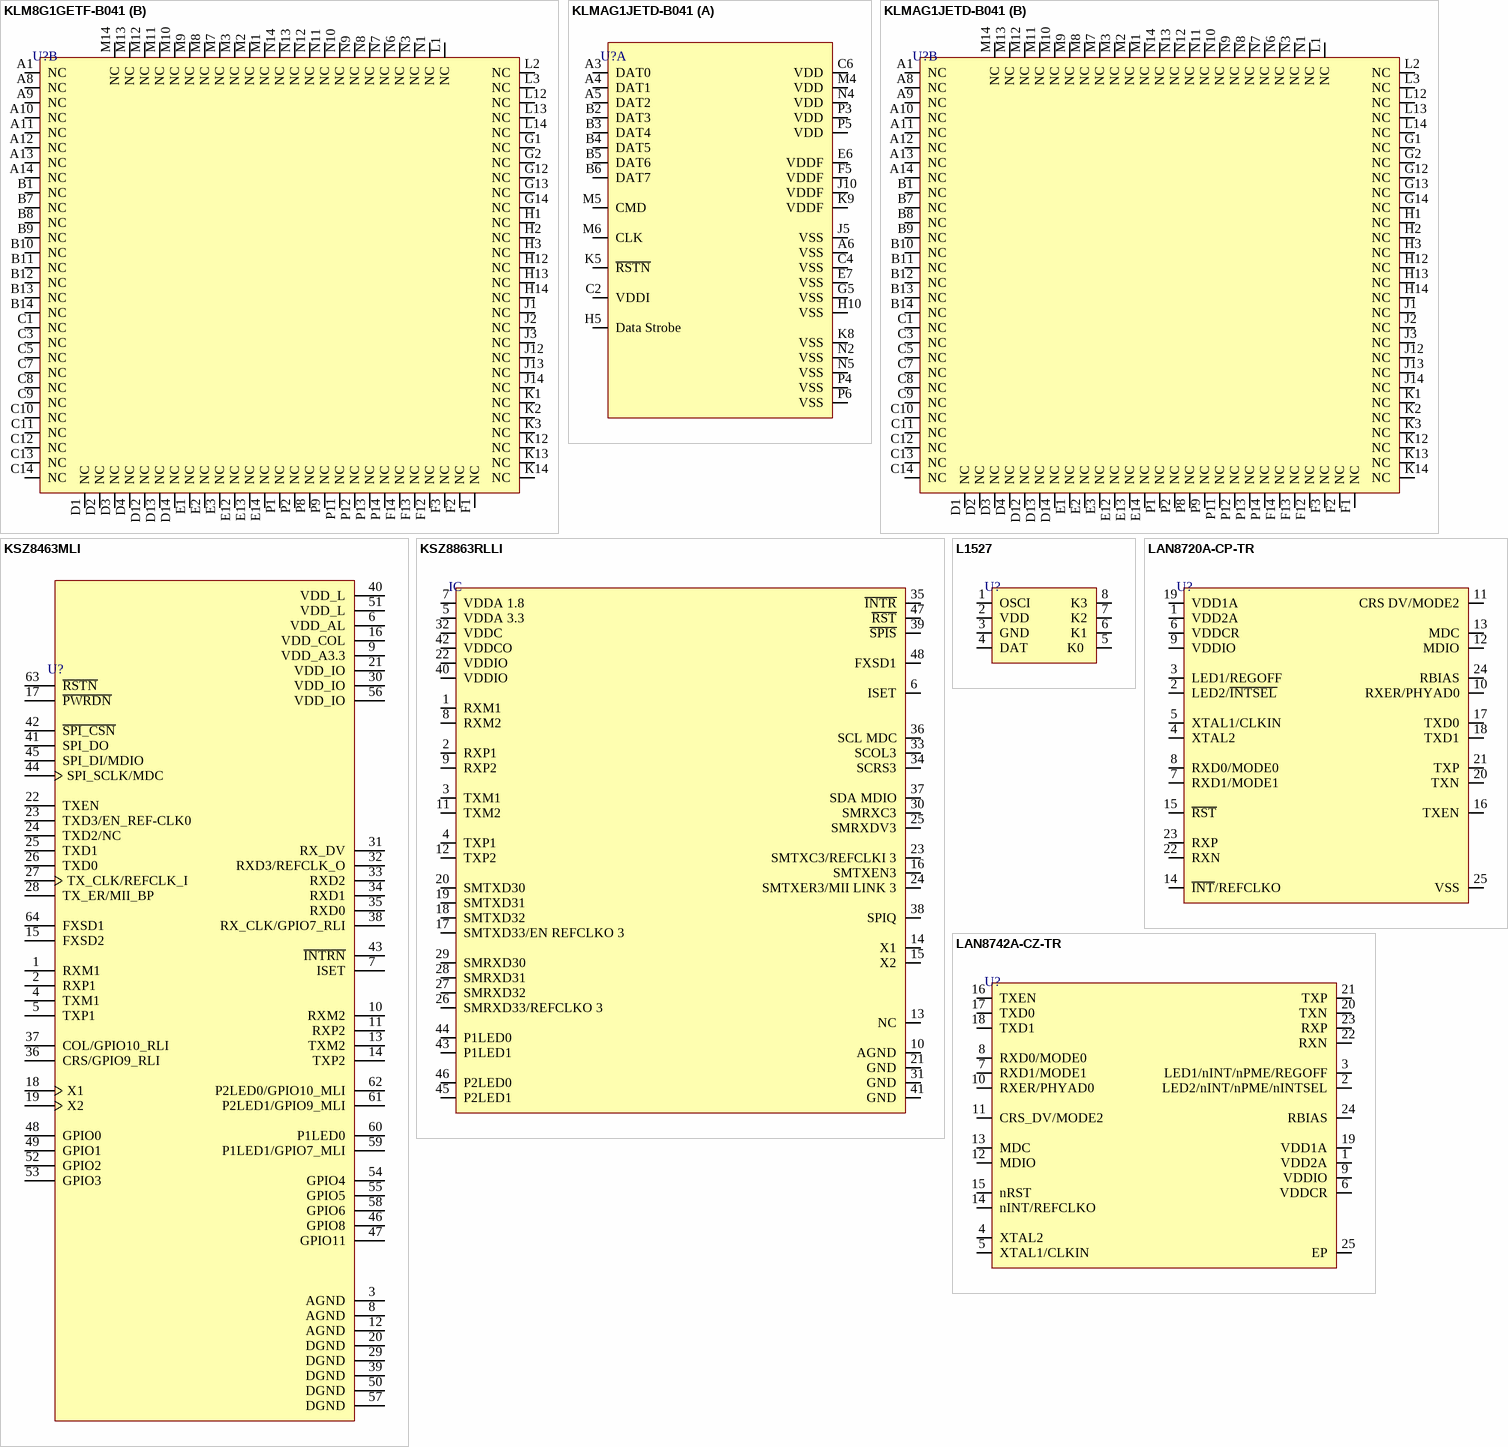
[diagram p7: symbols KLM8G1GETF-B041 to LAN8742A-CZ-TR]

## KLM8G1GETF-B041
designator U?
FBGA-153(11.5x13) eMMC ROHS; Manufacturer: Samsung; Manufacturer Part Number: KLM8G1GETF-B041; Item Type: IC; Package: FBGA-153(11.5x13); LCSC Part Number: C499918; ComponentLink1Description: LCSC; ComponentLink1URL: https://www.lcsc.com/product-detail/eMMC_Samsung-KLM8G1GETF-B041_C499918.html
footprint FBGA-153(11.5x13)
part A pins: A3 DAT0, A4 DAT1, A5 DAT2, A6 VSS, B2 DAT3, B3 DAT4, B4 DAT5, B5 DAT6, B6 DAT7, C2 VDDI, C4 VSSQ, C6 VCCQ, E6 VCC, E7 VSS, F5 VCC, G5 VSS, H5 Data Strobe, H10 VSS, J5 VSS, J10 VCC, K5 ~{RSTN}, K8 VSS, K9 VCC, M4 VCCQ, M5 CMD, M6 CLK, N2 VSSQ, N4 VCCQ, N5 VSSQ, P3 VCCQ, P4 VSSQ, P5 VCCQ, P6 VSSQ
part B pins: A1 NC, A8 NC, A9 NC, A10 NC, A11 NC, A12 NC, A13 NC, A14 NC, B1 NC, B7 NC, B8 NC, B9 NC, B10 NC, B11 NC, B12 NC, B13 NC, B14 NC, C1 NC, C3 NC, C5 NC, C7 NC, C8 NC, C9 NC, C10 NC, C11 NC, C12 NC, C13 NC, C14 NC, D1 NC, D2 NC, D3 NC, D4 NC, D12 NC, D13 NC, D14 NC, E1 NC, E2 NC, E3 NC, E12 NC, E13 NC, E14 NC, F1 NC, F2 NC, F3 NC, F12 NC, F13 NC, F14 NC, G1 NC, G2 NC, G12 NC, G13 NC, G14 NC, H1 NC, H2 NC, H3 NC, H12 NC, H13 NC, H14 NC, J1 NC, J2 NC, J3 NC, J12 NC, J13 NC, J14 NC, K1 NC, K2 NC, K3 NC, K12 NC, K13 NC, K14 NC, L1 NC, L2 NC, L3 NC, L12 NC, L13 NC, L14 NC, M1 NC, M2 NC, M3 NC, M7 NC, M8 NC, M9 NC, M10 NC, M11 NC, M12 NC, M13 NC, M14 NC, N1 NC, N3 NC, N6 NC, N7 NC, N8 NC, N9 NC, N10 NC, N11 NC, N12 NC, N13 NC, N14 NC, P1 NC, P2 NC, P8 NC, P9 NC, P11 NC, P12 NC, P13 NC, P14 NC

## KLMAG1JETD-B041
designator U?
eMMC 5.1 FBGA-153 eMMC ROHS; Manufacturer: Samsung; Manufacturer Part Number: KLMAG1JETD-B041; Item Type: IC; Package: FBGA-153; LCSC Part Number: C499919; ComponentLink1Description: LCSC; ComponentLink1URL: https://www.lcsc.com/product-detail/eMMC_Samsung-KLMAG1JETD-B041_C499919.html
footprint FBGA-153(11.5x13)
part A pins: A3 DAT0, A4 DAT1, A5 DAT2, A6 VSS, B2 DAT3, B3 DAT4, B4 DAT5, B5 DAT6, B6 DAT7, C2 VDDI, C4 VSS, C6 VDD, E6 VDDF, E7 VSS, F5 VDDF, G5 VSS, H5 Data Strobe, H10 VSS, J5 VSS, J10 VDDF, K5 ~{RSTN}, K8 VSS, K9 VDDF, M4 VDD, M5 CMD, M6 CLK, N2 VSS, N4 VDD, N5 VSS, P3 VDD, P4 VSS, P5 VDD, P6 VSS
part B pins: A1 NC, A8 NC, A9 NC, A10 NC, A11 NC, A12 NC, A13 NC, A14 NC, B1 NC, B7 NC, B8 NC, B9 NC, B10 NC, B11 NC, B12 NC, B13 NC, B14 NC, C1 NC, C3 NC, C5 NC, C7 NC, C8 NC, C9 NC, C10 NC, C11 NC, C12 NC, C13 NC, C14 NC, D1 NC, D2 NC, D3 NC, D4 NC, D12 NC, D13 NC, D14 NC, E1 NC, E2 NC, E3 NC, E12 NC, E13 NC, E14 NC, F1 NC, F2 NC, F3 NC, F12 NC, F13 NC, F14 NC, G1 NC, G2 NC, G12 NC, G13 NC, G14 NC, H1 NC, H2 NC, H3 NC, H12 NC, H13 NC, H14 NC, J1 NC, J2 NC, J3 NC, J12 NC, J13 NC, J14 NC, K1 NC, K2 NC, K3 NC, K12 NC, K13 NC, K14 NC, L1 NC, L2 NC, L3 NC, L12 NC, L13 NC, L14 NC, M1 NC, M2 NC, M3 NC, M7 NC, M8 NC, M9 NC, M10 NC, M11 NC, M12 NC, M13 NC, M14 NC, N1 NC, N3 NC, N6 NC, N7 NC, N8 NC, N9 NC, N10 NC, N11 NC, N12 NC, N13 NC, N14 NC, P1 NC, P2 NC, P8 NC, P9 NC, P11 NC, P12 NC, P13 NC, P14 NC

## KSZ8463MLI
designator U?
IC ETHERNET SWITCH 10/100 64LQFP; Manufacturer: Microchip; Manufacturer Part Number: KSZ8463MLI; Data Rate: 100Mbps; Interface: Ethernet, SPI; Max Junction Temperature (Tj): 125°C; Max Supply Voltage: 3.465V; Min Supply Voltage: 1.25V; Number of Channels: 3; Supplier: Arrow Electronics; LCSC Part Number: C634204; RoHS: Compliant; Item Type: IC; Stock: 1760; Pricing: 160=4.928 (USD); Projected EOL Date: 2039-08-01; Ambient Temperature Range High: 85°C; Case/Package: LQFP; Country of Assembly: Taiwan; Country of Fabrication: South Korea; Country of Origin: Taiwan; Export Control Classification Number (ECCN) Code: EAR99; Height: 1.6mm; Harmonized Tariff Schedule (HTS) Code: 8542.39.0060; Lead Free: Lead Free; Length: 10mm; Lifecycle Status: Production; Max Operating Temperature: 85°C; Min Operating Temperature: -40°C; Mounting Technology: Surface Mount; Pins: 64; Number of Ports: 3; Number of Transceivers: 3; REACH SVHC: Unknown; Schedule B: 8542390000, 8542390000|8542390000|8542390000|8542390000|8542390000; Width: 10mm; ComponentLink1URL: https://datasheet.octopart.com:443/KSZ8463MLI-Microchip-datasheet-147335722.pdf?src-supplier=Microchip; ComponentLink1Description: https://datasheet.octopart.com:443/KSZ8463MLI-Microchip-datasheet-147335722.pdf?src-supplier=Microchip; ComponentLink2URL: https://datasheet.octopart.com:443/KSZ8463MLI-Microchip-datasheet-62314874.pdf?src-supplier=SHENGYU+ELECTRONICS; ComponentLink2Description: https://datasheet.octopart.com:443/KSZ8463MLI-Microchip-datasheet-62314874.pdf?src-supplier=SHENGYU+ELECTRONICS; ComponentLink3URL: https://datasheet.octopart.com:443/KSZ8463MLI-Microchip-datasheet-20747454.pdf?src-supplier=Newark; ComponentLink3Description: https://datasheet.octopart.com:443/KSZ8463MLI-Microchip-datasheet-20747454.pdf?src-supplier=Newark; ComponentLink4URL: https://datasheet.octopart.com:443/KSZ8463MLI-Microchip-datasheet-12523765.pdf?src-supplier=Future+Electronics; ComponentLink4Description: https://datasheet.octopart.com:443/KSZ8463MLI-Microchip-datasheet-12523765.pdf?src-supplier=Future+Electronics; ComponentLink5URL: http://sigma.octopart.com:80/188454349/materials_sheet/Microchip-KSZ8463MLI.pdf?src-supplier=Compliance+Statements; ComponentLink5Description: http://sigma.octopart.com:80/188454349/materials_sheet/Microchip-KSZ8463MLI.pdf?src-supplier=Compliance+Statements; ComponentLink6URL: http://sigma.octopart.com:80/conflict_mineral_statement/Microchip-company-68.pdf?src-supplier=Compliance+Statements; ComponentLink6Description: http://sigma.octopart.com:80/conflict_mineral_statement/Microchip-company-68.pdf?src-supplier=Compliance+Statements; ComponentLink7URL: http://sigma.octopart.com:80/conflict_mineral_statement/Microchip-company-69.pdf?src-supplier=Compliance+Statements; ComponentLink7Description: http://sigma.octopart.com:80/conflict_mineral_statement/Microchip-company-69.pdf?src-supplier=Compliance+Statements; ComponentLink8URL: http://sigma.octopart.com:80/reach_statement/Microchip-company-70.pdf?src-supplier=Compliance+Statements; ComponentLink8Description: http://sigma.octopart.com:80/reach_statement/Microchip-company-70.pdf?src-supplier=Compliance+Statements; ComponentLink9URL: http://sigma.octopart.com:80/rohs_statement/Microchip-company-71.pdf?src-supplier=Compliance+Statements; ComponentLink9Description: http://sigma.octopart.com:80/rohs_statement/Microchip-company-71.pdf?src-supplier=Compliance+Statements
footprint 64-LQFP (10x10)
pins: 1 RXM1, 2 RXP1, 3 AGND, 4 TXM1, 5 TXP1, 6 VDD_AL, 7 ISET, 8 AGND, 9 VDD_A3.3, 10 RXM2, 11 RXP2, 12 AGND, 13 TXM2, 14 TXP2, 15 FXSD2, 16 VDD_COL, 17 ~{PWRDN}, 18 X1, 19 X2, 20 DGND, 21 VDD_IO, 22 TXEN, 23 TXD3/EN_REF-CLK0, 24 TXD2/NC, 25 TXD1, 26 TXD0, 27 TX_CLK/REFCLK_I, 28 TX_ER/MII_BP, 29 DGND, 30 VDD_IO, 31 RX_DV, 32 RXD3/REFCLK_O, 33 RXD2, 34 RXD1, 35 RXD0, 36 CRS/GPIO9_RLI, 37 COL/GPIO10_RLI, 38 RX_CLK/GPIO7_RLI, 39 DGND, 40 VDD_L, 41 SPI_DO, 42 ~{SPI_CSN}, 43 ~{INTRN}, 44 SPI_SCLK/MDC, 45 SPI_DI/MDIO, 46 GPIO8, 47 GPIO11, 48 GPIO0, 49 GPIO1, 50 DGND, 51 VDD_L, 52 GPIO2, 53 GPIO3, 54 GPIO4, 55 GPIO5, 56 VDD_IO, 57 DGND, 58 GPIO6, 59 P1LED1/GPIO7_MLI, 60 P1LED0, 61 P2LED1/GPIO9_MLI, 62 P2LED0/GPIO10_MLI, 63 ~{RSTN}, 64 FXSD1

## KSZ8863RLLI
designator IC
IC ETHERNET SWITCH 3PORT 48-LQFP; Manufacturer: Microchip; Manufacturer Part Number: KSZ8863RLLI; Supplier: Digikey; LCSC Part Number: C631675; RoHS: Yes; Item Type: IC; Stock: 2925; Pricing: 1=6.57, 25=5.47, 100=5.2875 (USD); Lead Free: 5697LeadFree; ComponentLink1URL: https://datasheet.ciiva.com/1141/ksz8863mll-fll-rll-ds-1141682.pdf?src-supplier=Element14; ComponentLink1Description: https://datasheet.ciiva.com/1141/ksz8863mll-fll-rll-ds-1141682.pdf?src-supplier=Element14; ComponentLink2URL: https://datasheet.ciiva.com/16367/ksz8863mll-fll-rll-ds-16367589.pdf?src-supplier=Future+Electronics; ComponentLink2Description: https://datasheet.ciiva.com/16367/ksz8863mll-fll-rll-ds-16367589.pdf?src-supplier=Future+Electronics
footprint 48-LQFP (7x7)
pins: 1 RXM1, 2 RXP1, 3 TXM1, 4 TXP1, 5 VDDA 3.3, 6 ISET, 7 VDDA 1.8, 8 RXM2, 9 RXP2, 10 AGND, 11 TXM2, 12 TXP2, 13 NC, 14 X1, 15 X2, 16 SMTXEN3, 17 SMTXD33/EN REFCLKO 3, 18 SMTXD32, 19 SMTXD31, 20 SMTXD30, 21 GND, 22 VDDIO, 23 SMTXC3/REFCLKI 3, 24 SMTXER3/MII LINK 3, 25 SMRXDV3, 26 SMRXD33/REFCLKO 3, 27 SMRXD32, 28 SMRXD31, 29 SMRXD30, 30 SMRXC3, 31 GND, 32 VDDC, 33 SCOL3, 34 SCRS3, 35 ~{INTR}, 36 SCL MDC, 37 SDA MDIO, 38 SPIQ, 39 ~{SPIS}, 40 VDDIO, 41 GND, 42 VDDCO, 43 P1LED1, 44 P1LED0, 45 P2LED1, 46 P2LED0, 47 ~{RST}, 48 FXSD1

## L1527
designator U?
SOP-8 Interface - Specialized ROHS; Manufacturer: WL; Manufacturer Part Number: L1527; Item Type: IC; Package: SOP-8; LCSC Part Number: C3038668; ComponentLink1Description: LCSC
footprint SOP-8
pins: 1 OSCI, 2 VDD, 3 GND , 4 DAT , 5 K0 , 6 K1, 7 K2, 8 K3

## LAN8720A-CP-TR
designator U?
IC TRANSCEIVER FULL 2/2 24QFN; Manufacturer: Microchip; Manufacturer Part Number: LAN8720A-CP-TR; Data Rate: 100Mbps; Simplex/Duplex: Full Duplex; Max Supply Voltage: 3.6V; Min Supply Voltage: 1.62V; Number of Channels: 1; Max Supply Current: 49mA; Supplier: Future Electronics; LCSC Part Number: C45223; RoHS: Yes; Item Type: IC; Stock: 5000; Pricing: 5000=1.48 (USD); Mounting Technology: Surface Mount; Case/Package: QFN; Pins: 24; Min Operating Temperature: 0°C; Max Operating Temperature: 85°C; Packaging: Tape and Reel; Series: -; Package Quantity: 1; Number of Transceivers: 1; Lead Free: Lead Free; RoHS Compliant: Yes; ComponentLink1URL: https://datasheet.ciiva.com/29644/lan8720a-lan8720ai-29644376.pdf?src-supplier=Digikey; ComponentLink1Description: https://datasheet.ciiva.com/29644/lan8720a-lan8720ai-29644376.pdf?src-supplier=Digikey
footprint 24-QFN (4x4)
pins: 1 VDD2A, 2 LED2/~{INTSEL}, 3 LED1/REGOFF, 4 XTAL2, 5 XTAL1/CLKIN, 6 VDDCR, 7 RXD1/MODE1, 8 RXD0/MODE0, 9 VDDIO, 10 RXER/PHYAD0, 11 CRS DV/MODE2, 12 MDIO, 13 MDC, 14 ~{INT}/REFCLKO, 15 ~{RST}, 16 TXEN, 17 TXD0, 18 TXD1, 19 VDD1A, 20 TXN, 21 TXP, 22 RXN, 23 RXP, 24 RBIAS, 25 VSS

## LAN8742A-CZ-TR
designator U?
IC TRANSCEIVER 1/1 24SQFN; Manufacturer: Microchip; Manufacturer Part Number: LAN8742A-CZ-TR; Number of Channels: 2NUMBER; Simplex/Duplex: 5881DuplexType; Supplier: Arrow Electronics; LCSC Part Number: C621424; RoHS: Yes; Item Type: IC; Stock: 826; Pricing: 1=1.378, 25=1.244 (USD); ComponentLink1URL: https://datasheet.ciiva.com/28472/1776727-28472380.pdf?src-supplier=Element14; ComponentLink1Description: https://datasheet.ciiva.com/28472/1776727-28472380.pdf?src-supplier=Element14; ComponentLink2URL: https://datasheet.ciiva.com/29882/8742a-29882613.pdf?src-supplier=Avnet; ComponentLink2Description: https://datasheet.ciiva.com/29882/8742a-29882613.pdf?src-supplier=Avnet
footprint 24-QFN (4x4)
pins: 1 VDD2A, 2 LED2/nINT/nPME/nINTSEL, 3 LED1/nINT/nPME/REGOFF, 4 XTAL2, 5 XTAL1/CLKIN, 6 VDDCR, 7 RXD1/MODE1, 8 RXD0/MODE0, 9 VDDIO, 10 RXER/PHYAD0, 11 CRS_DV/MODE2, 12 MDIO, 13 MDC, 14 nINT/REFCLKO, 15 nRST, 16 TXEN, 17 TXD0, 18 TXD1, 19 VDD1A, 20 TXN, 21 TXP, 22 RXN, 23 RXP, 24 RBIAS, 25 EP

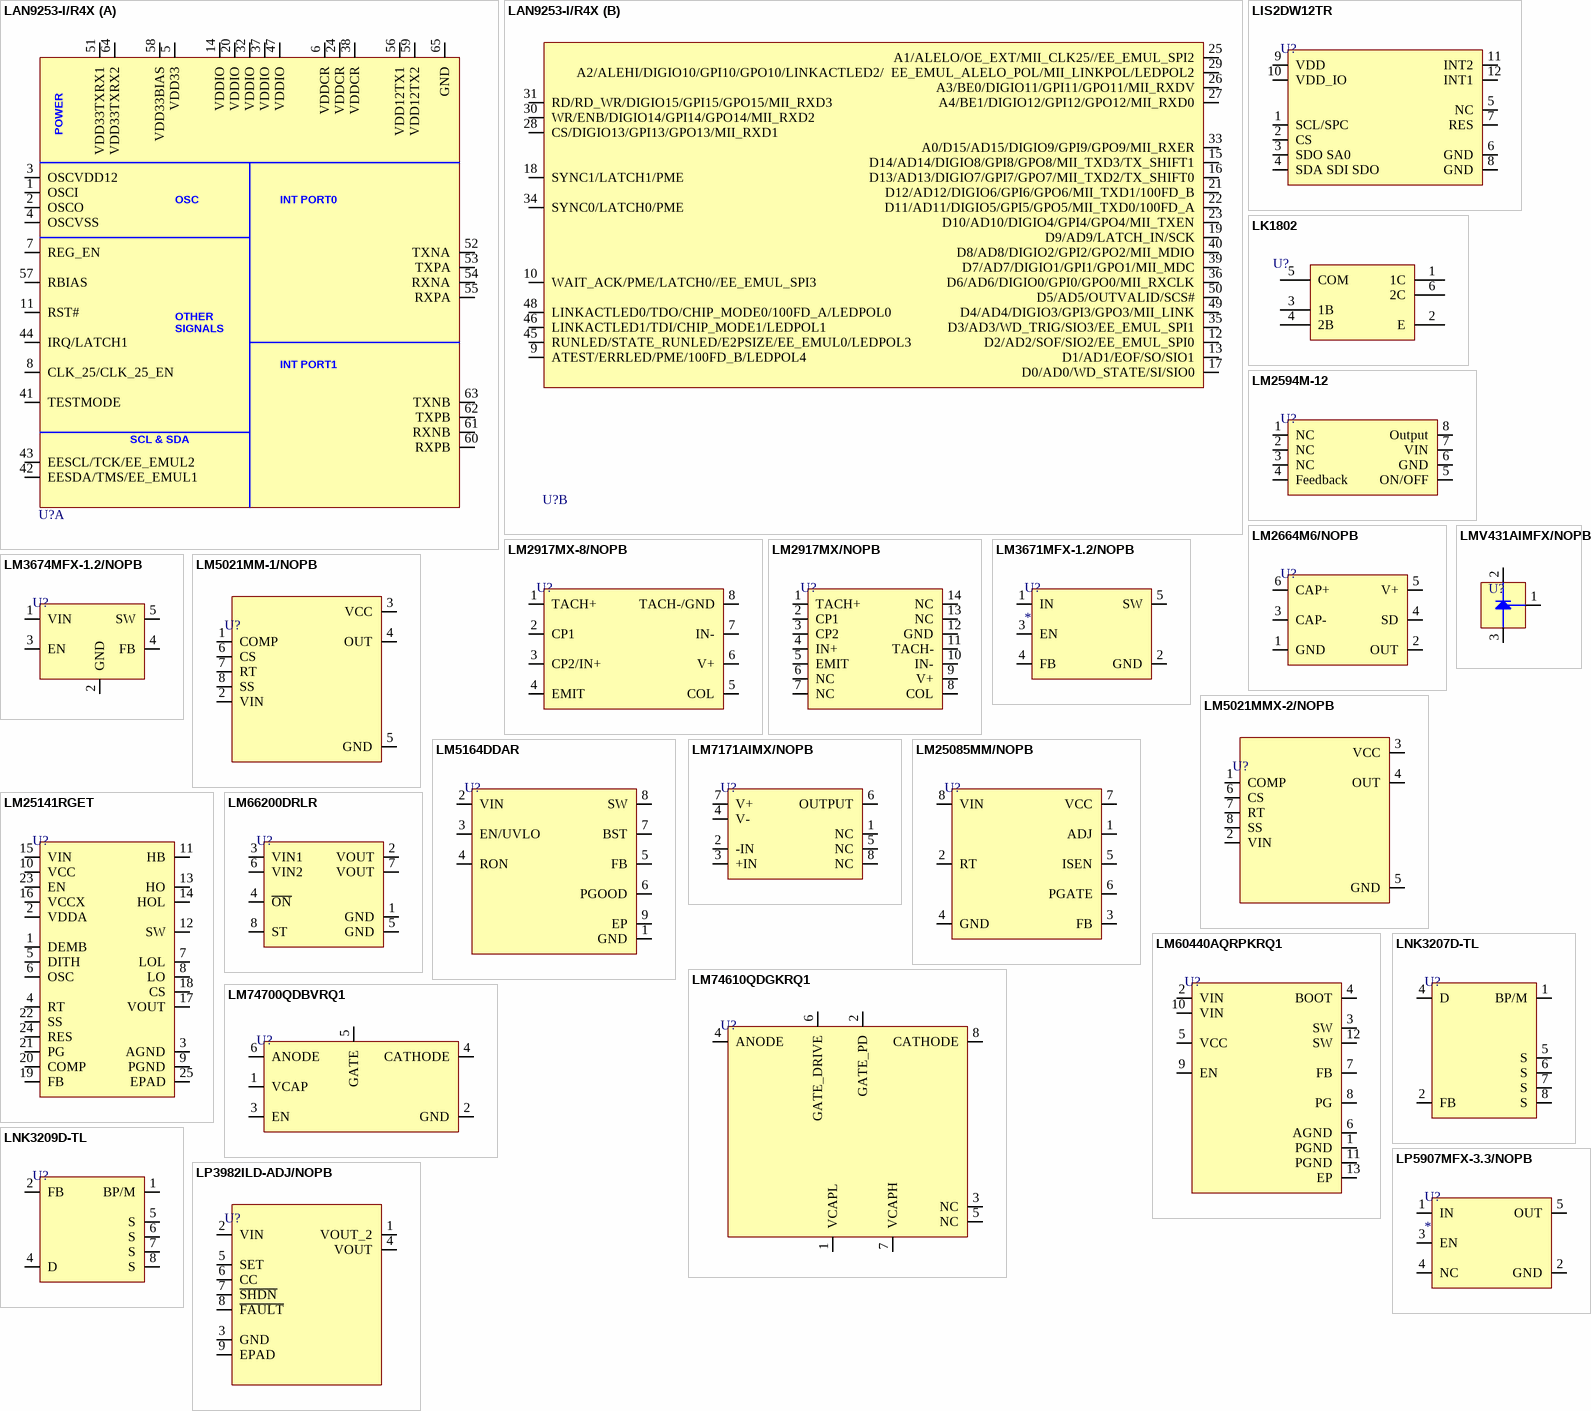
[diagram p8: symbols LAN9253-I/R4X to LP5907MFX-3.3/NOPB]

## LAN9253-I/R4X
designator U?
2/3-PORT ETHERCAT SLAVE CTLR; Manufacturer: Microchip; Manufacturer Part Number: LAN9253-I/R4X; Item Type: IC; Revision: 2; ComponentLink1Description: SVN Datasheet; ComponentLink2Description: Local Datasheet; ComponentLink5Description: Open Footprint 2; ComponentLink6Description: Open Footprint 3; Supplier: Digikey; Supplier Part Number: 150-LAN9253-I/R4X-ND; RoHS: Yes; Stock: 364; Pricing: 1=13.43, 25=11.2, 100=10.825 (USD)
footprint QFN-64-EP(9x9)
part A pins: 1 OSCI, 2 OSCO, 3 OSCVDD12, 4 OSCVSS, 5 VDD33, 6 VDDCR, 7 REG_EN, 8 CLK_25/CLK_25_EN, 11 RST#, 14 VDDIO, 20 VDDIO, 24 VDDCR, 32 VDDIO, 37 VDDIO, 38 VDDCR, 41 TESTMODE, 42 EESDA/TMS/EE_EMUL1, 43 EESCL/TCK/EE_EMUL2, 44 IRQ/LATCH1, 47 VDDIO, 51 VDD33TXRX1, 52 TXNA, 53 TXPA, 54 RXNA, 55 RXPA, 56 VDD12TX1, 57 RBIAS, 58 VDD33BIAS, 59 VDD12TX2, 60 RXPB, 61 RXNB, 62 TXPB, 63 TXNB, 64 VDD33TXRX2, 65 GND
part B pins: 9 ATEST/ERRLED/PME/100FD_B/LEDPOL4, 10 WAIT_ACK/PME/LATCH0//EE_EMUL_SPI3, 12 D2/AD2/SOF/SIO2/EE_EMUL_SPI0, 13 D1/AD1/EOF/SO/SIO1, 15 D14/AD14/DIGIO8/GPI8/GPO8/MII_TXD3/TX_SHIFT1, 16 D13/AD13/DIGIO7/GPI7/GPO7/MII_TXD2/TX_SHIFT0, 17 D0/AD0/WD_STATE/SI/SIO0, 18 SYNC1/LATCH1/PME, 19 D9/AD9/LATCH_IN/SCK, 21 D12/AD12/DIGIO6/GPI6/GPO6/MII_TXD1/100FD_B, 22 D11/AD11/DIGIO5/GPI5/GPO5/MII_TXD0/100FD_A, 23 D10/AD10/DIGIO4/GPI4/GPO4/MII_TXEN, 25 A1/ALELO/OE_EXT/MII_CLK25//EE_EMUL_SPI2, 26 A3/BE0/DIGIO11/GPI11/GPO11/MII_RXDV, 27 A4/BE1/DIGIO12/GPI12/GPO12/MII_RXD0, 28 CS/DIGIO13/GPI13/GPO13/MII_RXD1, 29 A2/ALEHI/DIGIO10/GPI10/GPO10/LINKACTLED2/  EE_EMUL_ALELO_POL/MII_LINKPOL/LEDPOL2, 30 WR/ENB/DIGIO14/GPI14/GPO14/MII_RXD2, 31 RD/RD_WR/DIGIO15/GPI15/GPO15/MII_RXD3, 33 A0/D15/AD15/DIGIO9/GPI9/GPO9/MII_RXER, 34 SYNC0/LATCH0/PME, 35 D3/AD3/WD_TRIG/SIO3/EE_EMUL_SPI1, 36 D6/AD6/DIGIO0/GPI0/GPO0/MII_RXCLK, 39 D7/AD7/DIGIO1/GPI1/GPO1/MII_MDC, 40 D8/AD8/DIGIO2/GPI2/GPO2/MII_MDIO, 45 RUNLED/STATE_RUNLED/E2PSIZE/EE_EMUL0/LEDPOL3, 46 LINKACTLED1/TDI/CHIP_MODE1/LEDPOL1, 48 LINKACTLED0/TDO/CHIP_MODE0/100FD_A/LEDPOL0, 49 D4/AD4/DIGIO3/GPI3/GPO3/MII_LINK, 50 D5/AD5/OUTVALID/SCS#
part A text: POWER; OSC; INT PORT0; OTHER / SIGNALS; INT PORT1; SCL & SDA

## LIS2DW12TR
designator U?
ACCEL 2-16G I2C/SPI 12LGA; Manufacturer: STMicroelectronics; Manufacturer Part Number: LIS2DW12TR; Output Type: SPI,I2C; Axis: X, Y, Z; Bandwidth: 400Hz; Item Type: IC; Supplier: Mouser; Supplier Part Number: 511-LIS2DW12TR; RoHS: Yes; Category: Accelerometers; Stock: 14817; Pricing: 1=2.65, 10=2.16, 50=2.16, 100=1.54, 1000=1.21, 10000=0.988 (USD); Mounting Technology: Surface Mount; Case/Package: LGA; Pins: 12; Min Operating Temperature: -40°C; Max Operating Temperature: 85°C; Packaging: Cut Tape; Series: -; RoHS Compliant: Yes; ComponentLink1URL: http://www.farnell.com/datasheets/2581666.pdf?src-supplier=Farnell; ComponentLink1Description: http://www.farnell.com/datasheets/2581666.pdf?src-supplier=Farnell; LCSC Part Number: C189624
footprint 12-LGA (2x2)
pins: 1 SCL/SPC, 2 CS, 3 SDO SA0, 4 SDA SDI SDO, 5 NC, 6 GND, 7 RES, 8 GND, 9 VDD, 10 VDD_IO, 11 INT2, 12 INT1

## LK1802
designator U?
SOT-23-6 Darlington Transistor Arrays ROHS; Manufacturer: LANKE; Manufaure Part Number: LK1802; Item Type: IC; Package: SOT-23-6; LCSC Part Number: C2984831; ComponentLink1Description: LCSC; ComponentLink1URL: https://www.lcsc.com/product-detail/Darlington-Transistor-Arrays_LANKE-LK1802_C2984831.html
footprint SOT-23-6
pins: 1 1C, 2 E, 3 1B, 4 2B, 5 COM, 6 2C

## LM2594M-12
designator U?
Step-down type Fixed 12V 4.5V~40V 1.5A SOP-8 DC-DC Converters ROHS; Manufacturer: UMW(Youtai Semiconductor Co., Ltd.); Manufacturer Part Number: LM2594M-12; Item Type: IC; Package: SOP-8; LCSC Part Number: C3029050; ComponentLink1Description: LCSC; ComponentLink1URL: https://www.lcsc.com/product-detail/DC-DC-Converters_UMW-Youtai-Semiconductor-Co-Ltd-LM2594M-12_C3029050.html
footprint SOP-8
pins: 1 NC, 2 NC, 3 NC, 4 Feedback, 5 ON/OFF, 6 GND, 7 VIN, 8 Output

## LM2664M6/NOPB
designator U?
IC REG CHRG PUMP INV 40MA SOT23; Manufacturer: TI National Semiconductor; Manufacturer Part Number: LM2664M6/NOPB; Max Supply Voltage: 5.5V; Min Supply Voltage: 1.8V; Output Voltage: -5.5V; Number of Outputs: 1; Frequency: 160kHz; Max Power Dissipation: 600mW; Switching Frequency: 80kHz; Logic Function: Inverting; Max Output Voltage: -1.8V; Topology: Buck-Boost,Charge Pump; Output Type: Fixed,Adjustable; Synchronous Rectifier: No; Supply Current: 500uA; Number of Channels: 1NUMBER; Output Power: 500mW; Supplier: Mouser; LCSC Part Number: C840095; RoHS: Yes; Item Type: IC; Stock: 36504; Pricing: 1=0.95, 10=0.616, 50=0.616, 100=0.507, 1000=0.467, 10000=0.422 (USD); Mounting Technology: Surface Mount; Case/Package: SOT-23; Pins: 6; Min Operating Temperature: -40°C; Max Operating Temperature: 85°C; Packaging: Tape and Reel; Output Current: 40mA; Min Input Voltage: 1.8V; Max Output current: 40mA; Package Quantity: 1000; Min Output Voltage: -5.5V; Termination: SMD/SMT; Series: -; Length: 2.92mm; Width: 1.6mm; Height: 1.02mm; Thickness: 1.2mm; Radiation Hardening: No; Reach SVHC Compliant: No; Lead Free: 5697LeadFree; ComponentLink1URL: https://datasheet.ciiva.com/22669/1811104-22669560.pdf?src-supplier=Element14; ComponentLink1Description: https://datasheet.ciiva.com/22669/1811104-22669560.pdf?src-supplier=Element14; ComponentLink2URL: https://datasheet.ciiva.com/27055/1992911-27055843.pdf?src-supplier=Jameco; ComponentLink2Description: https://datasheet.ciiva.com/27055/1992911-27055843.pdf?src-supplier=Jameco; ComponentLink3URL: https://datasheet.ciiva.com/1641/1703149-1641090.pdf?src-supplier=Newark; ComponentLink3Description: https://datasheet.ciiva.com/1641/1703149-1641090.pdf?src-supplier=Newark; ComponentLink4URL: https://datasheet.ciiva.com/15114/getdatasheetpartid-117448-15114290.pdf?src-supplier=Verical; ComponentLink4Description: https://datasheet.ciiva.com/15114/getdatasheetpartid-117448-15114290.pdf?src-supplier=Verical; ComponentLink5URL: https://datasheet.ciiva.com/5699/1853535-5699178.pdf?src-supplier=Farnell; ComponentLink5Description: https://datasheet.ciiva.com/5699/1853535-5699178.pdf?src-supplier=Farnell
footprint SOT-23-6
pins: 1 GND, 2 OUT, 3 CAP-, 4 SD, 5 V+, 6 CAP+

## LM2917MX-8/NOPB
designator U?
IC F/V CONV 10KHZ 8SOIC; Manufacturer: TI National Semiconductor; Manufacturer Part Number: LM2917MX-8/NOPB; Supplier: Mouser; LCSC Part Number: C2650262; RoHS: Yes; Item Type: IC; Stock: 7556; Pricing: 1=2, 10=1.34, 50=1.34, 100=1.17, 1000=0.985, 10000=0.883 (USD); ComponentLink1URL: https://datasheet.ciiva.com/2005/lm2917-n-2005316.pdf?src-supplier=Digikey; ComponentLink1Description: https://datasheet.ciiva.com/2005/lm2917-n-2005316.pdf?src-supplier=Digikey; ComponentLink2URL: https://datasheet.ciiva.com/2005/lm2917-n-2005317.pdf?src-supplier=Digikey; ComponentLink2Description: https://datasheet.ciiva.com/2005/lm2917-n-2005317.pdf?src-supplier=Digikey; ComponentLink3URL: https://datasheet.ciiva.com/2005/lm2917-n-2005318.pdf?src-supplier=Digikey; ComponentLink3Description: https://datasheet.ciiva.com/2005/lm2917-n-2005318.pdf?src-supplier=Digikey
footprint SOIC-8(0.154", 3.90mm Width)
pins: 1 TACH+, 2 CP1, 3 CP2/IN+, 4 EMIT, 5 COL, 6 V+, 7 IN-, 8 TACH-/GND

## LM2917MX/NOPB
designator U?
IC F/V CONV 10KHZ 14SOIC; Manufacturer: TI National Semiconductor; Manufacturer Part Number: LM2917MX/NOPB; Supplier: Mouser; Supplier Part Number: 926-LM2917MX/NOPB; RoHS: Yes; Item Type: IC; Stock: 2633; Pricing: 1=1.47, 10=1.3, 50=1.3, 100=1.17, 1000=0.93, 10000=0.841 (USD); ComponentLink1URL: https://datasheet.ciiva.com/41458/001013957-da-01-en-ic-converter-f-lm2917mx-nopb-soic-14-tid-41458035.pdf?src-supplier=Conrad; ComponentLink1Description: https://datasheet.ciiva.com/41458/001013957-da-01-en-ic-converter-f-lm2917mx-nopb-soic-14-tid-41458035.pdf?src-supplier=Conrad; ComponentLink2URL: https://datasheet.ciiva.com/6598/lm2907-n-6598250.pdf?src-supplier=Digikey; ComponentLink2Description: https://datasheet.ciiva.com/6598/lm2907-n-6598250.pdf?src-supplier=Digikey; ComponentLink3URL: https://datasheet.ciiva.com/6598/lm2907-n-6598251.pdf?src-supplier=Digikey; ComponentLink3Description: https://datasheet.ciiva.com/6598/lm2907-n-6598251.pdf?src-supplier=Digikey; ComponentLink4URL: https://datasheet.ciiva.com/6598/lm2907-n-6598253.pdf?src-supplier=Digikey; ComponentLink4Description: https://datasheet.ciiva.com/6598/lm2907-n-6598253.pdf?src-supplier=Digikey; LCSC Part Number: C914112
footprint SOIC-14
pins: 1 TACH+, 2 CP1, 3 CP2, 4 IN+, 5 EMIT, 6 NC, 7 NC, 8 COL, 9 V+, 10 IN-, 11 TACH-, 12 GND, 13 NC, 14 NC

## LM3671MFX-1.2/NOPB
designator U?
Conv DC-DC 2.7V to 5.5V Synchronous Step Down Single-Out 1.2V 0.6A 5-Pin SOT-23 T/R; Manufacturer: TI National Semiconductor; Manufacturer Part Number: LM3671MFX-1.2/NOPB; Item Type: IC; Package: SOT-23-5; JLCPCB Part Number: C130903; ComponentLink2Description: JLCPCB; ComponentLink2URL: https://jlcpcb.com/partdetail/TexasInstruments-LM3671MFX_1_2NOPB/C130903; Supplier: Digikey; Supplier Part Number: 296-35177-1-ND; RoHS: Yes; Category: Voltage Regulators - Switching; Stock: 5660; Pricing: 1=1.55, 10=1.382, 25=1.312, 100=1.0779, 250=1.00756, 500=0.89042, 1000=0.70296 (USD); ComponentLink1URL: https://datasheet.ciiva.com/14304/lm3671-14304703.pdf?src-supplier=Avnet; ComponentLink1Description: https://datasheet.ciiva.com/14304/lm3671-14304703.pdf?src-supplier=Avnet; ComponentLink3URL: https://datasheet.ciiva.com/6603/lm3671-6603973.pdf?src-supplier=Digikey; ComponentLink3Description: https://datasheet.ciiva.com/6603/lm3671-6603973.pdf?src-supplier=Digikey; ComponentLink4URL: https://datasheet.ciiva.com/6603/lm3671-6603974.pdf?src-supplier=Digikey; ComponentLink4Description: https://datasheet.ciiva.com/6603/lm3671-6603974.pdf?src-supplier=Digikey; ComponentLink5URL: https://datasheet.ciiva.com/6603/lm3671-6603975.pdf?src-supplier=Digikey; ComponentLink5Description: https://datasheet.ciiva.com/6603/lm3671-6603975.pdf?src-supplier=Digikey
footprint SOT-23-5
pins: 1 IN, 2 GND, 3 EN, 4 FB, 5 SW

## LM3674MFX-1.2/NOPB
designator U?
IC REG BUCK 1.2V 600MA SOT23-5; Manufacturer: TI National Semiconductor; Manufacturer Part Number: LM3674MFX-1.2/NOPB; Number of Outputs: 1; Min Input Voltage: 2.7V; Max Supply Voltage: 5.5V; Switching Frequency: 2MHz; Synchronous Rectifier: Yes; Quiescent Current: 300uA; Output Type: Fixed; Output Configuration: Positive; Supplier: Mouser; LCSC Part Number: C2071166; RoHS: Yes; Item Type: IC; Stock: 390; Pricing: 1=1.54, 10=1.38, 50=1.38, 100=1.07, 1000=0.702, 10000=0.599 (USD); Mounting Technology: Surface Mount; Case/Package: SOT-23-5; Pins: 5; Min Operating Temperature: -30°C; Max Operating Temperature: 85°C; Packaging: Tape and Reel; Output Voltage: 1.2V; Max Output current: 600mA; Output Current: 600mA; Package Quantity: 3000; Min Output Voltage: 1.2V; Operating Supply Voltage: 5.5V; Series: -; Radiation Hardening: No; Lead Free: Lead Free; RoHS Compliant: Yes; ComponentLink1URL: http://components.arrow.com/part/dataview/56701705S8560073N1317?src-supplier=Arrow+Electronics; ComponentLink1Description: http://components.arrow.com/part/dataview/56701705S8560073N1317?src-supplier=Arrow+Electronics; ComponentLink2URL: http://www.ti.com/general/docs/suppproductinfo.tsp?distId=10&amp;gotoUrl=http%3A%2F%2Fwww.ti.com%2Flit%2Fgpn%2Flm3674&src-supplier=Digikey; ComponentLink2Description: http://www.ti.com/general/docs/suppproductinfo.tsp?distId=10&amp;gotoUrl=http%3A%2F%2Fwww.ti.com%2Flit%2Fgpn%2Flm3674&src-supplier=Digikey; ComponentLink3URL: http://www.ti.com/lit/gpn/lm3674?src-supplier=Mouser; ComponentLink3Description: http://www.ti.com/lit/gpn/lm3674?src-supplier=Mouser; ComponentLink4URL: http://www.ti.com/lit/ds/symlink/lm3674.pdf?src-supplier=Avnet; ComponentLink4Description: http://www.ti.com/lit/ds/symlink/lm3674.pdf?src-supplier=Avnet; ComponentLink5URL: http://www.ti.com/lit/ds/symlink/lm3674.pdf?src-supplier=Digikey; ComponentLink5Description: http://www.ti.com/lit/ds/symlink/lm3674.pdf?src-supplier=Digikey
footprint SOT-23-5
pins: 1 VIN, 2 GND, 3 EN, 4 FB, 5 SW